# Altium schematic symbol library SCH.SchLib: 154 symbols
Pins are listed as number, name and electrical type; pins without a type are passive.

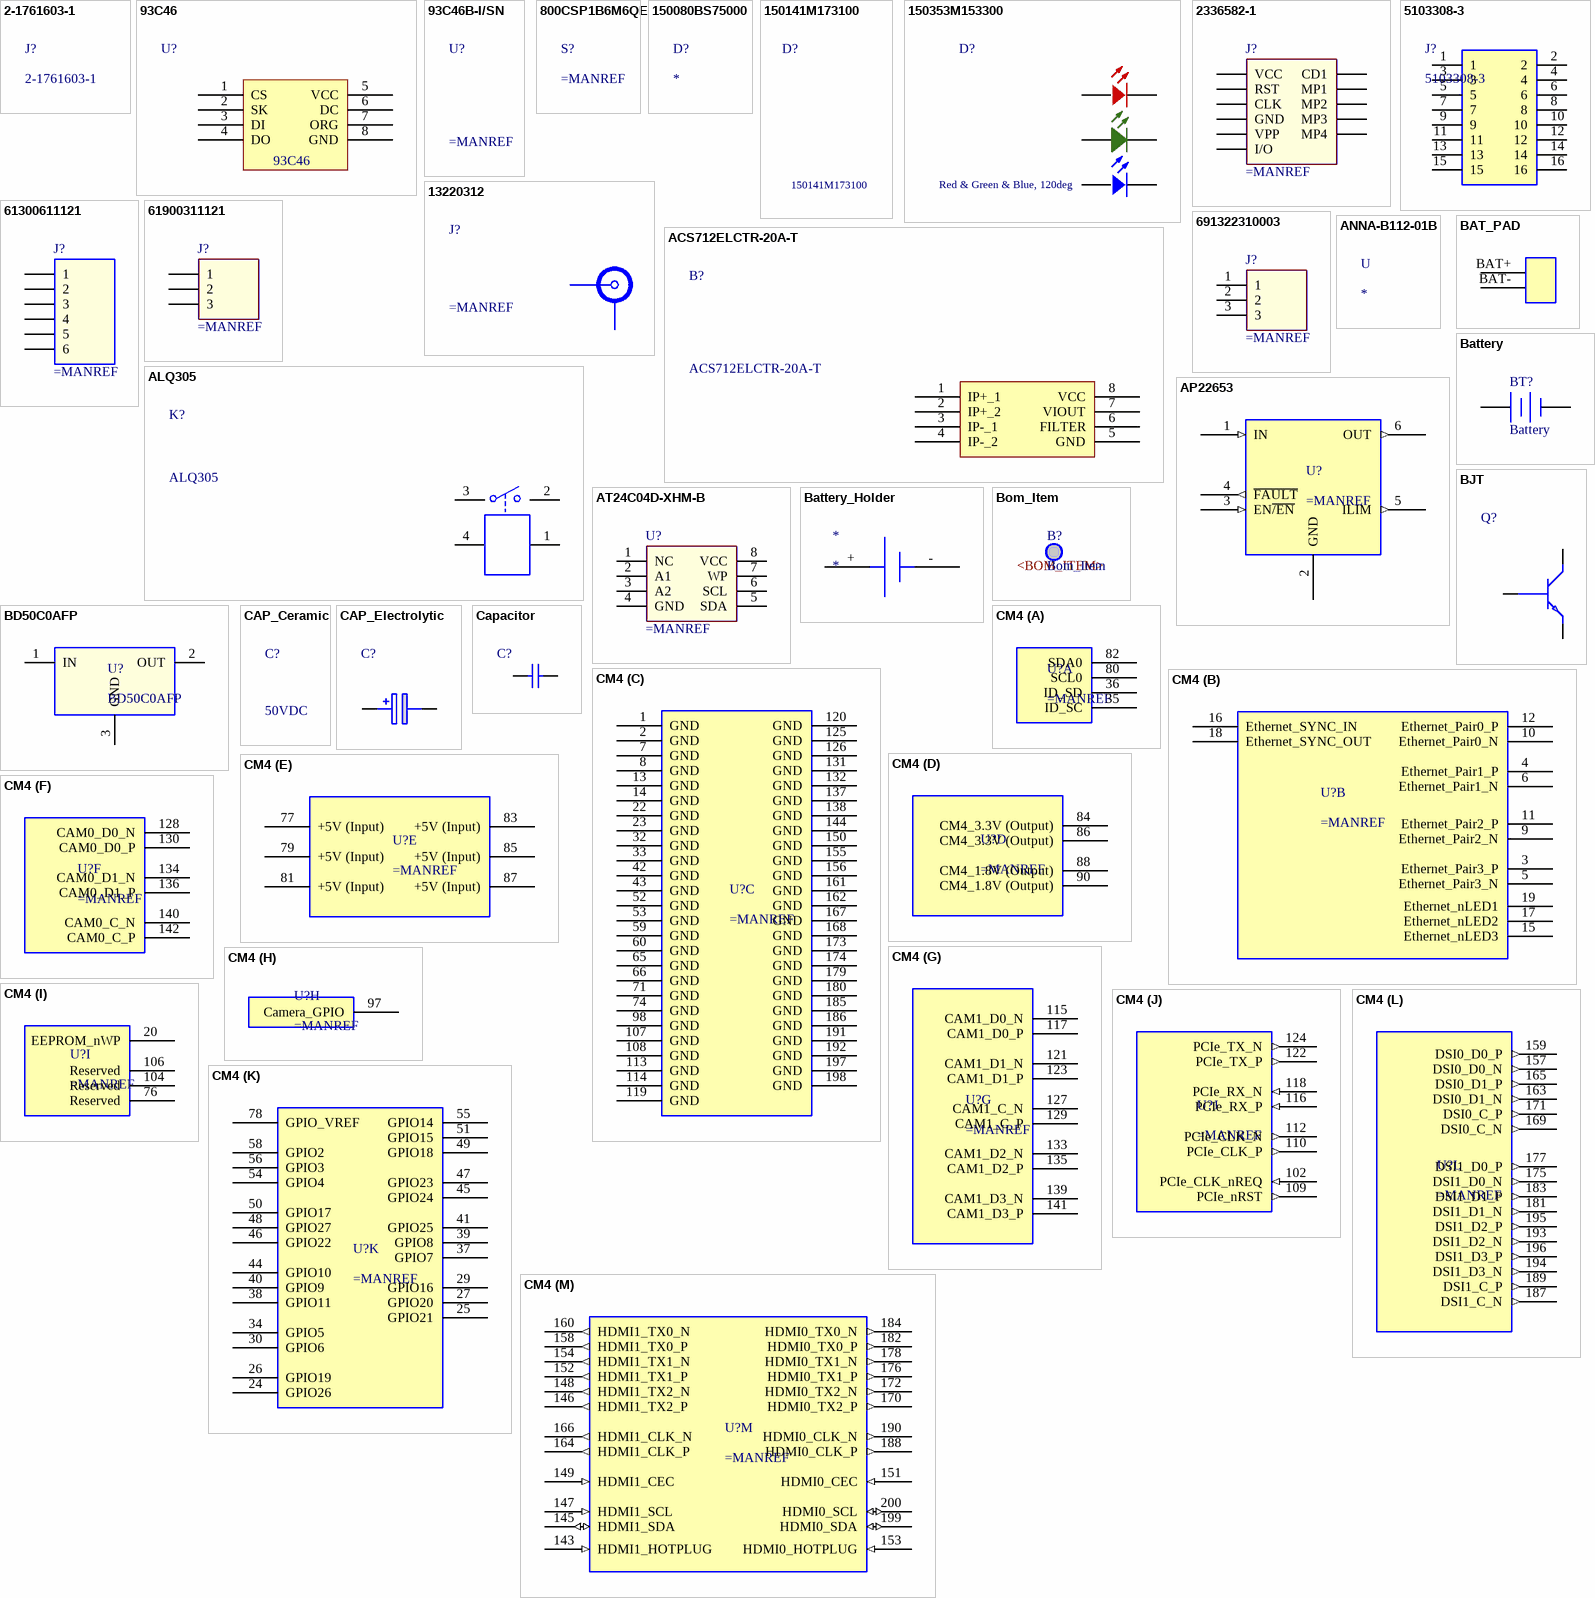
[diagram p0: symbols 2-1761603-1 to CM4]

## 2-1761603-1
designator J?

## 93C46
designator U?
pins: 1 CS, 2 SK, 3 DI, 4 DO, 5 VCC (power), 6 DC, 7 ORG, 8 GND (power)

## 93C46B-I/SN
designator U?

## 800CSP1B6M6QE
designator S?

## 150080BS75000
designator D?

## 150141M173100
designator D?

## 150353M153300
designator D?, comment Red & Green & Blue, 120deg
footprint WL-SFTW_5050_150505M173300
pins: 1 A, 2 K, 3 A, 4 K, 5 A, 6 K

## 2336582-1
designator J?
4FF SIM, Push-Push Type, 7 Position, 7 Loaded Positions, Signal, -40  80 C [-40  185 F], SIM Card Connectors; Manufacturer_Name: TE Connectivity; Manufacturer_Part_Number: 2336582-1; Geometry.Height: 1.62mm; Mouser Part Number: *; Mouser Price/Stock: *; Datasheet Link: https://www.te.com/en/product-2336582-1.html
pins: C1 VCC, C2 RST, C3 CLK, C5 GND, C6 VPP, C7 I/O, CD1, MP1, MP2, MP3, MP4

## 5103308-3
designator J?
pins: 1, 2, 3, 4, 5, 6, 7, 8, 9, 10, 11, 12, 13, 14, 15, 16

## 13220312
designator J?
pins: 1,2,3,4 1, 5

## 61300611121
designator J?
pins: 1, 2, 3, 4, 5, 6

## 61900311121
designator J?
pins: 1, 2, 3

## 691322310003
designator J?
pins: 1, 2, 3

## ACS712ELCTR-20A-T
designator B?
pins: 1 IP+_1, 2 IP+_2, 3 IP-_1, 4 IP-_2, 5 GND, 6 FILTER, 7 VIOUT, 8 VCC

## ALQ305
designator K?
pins: 1 COIL_1, 2 NO, 3 COM, 4 COIL_2

## ANNA-B112-01B
designator U
MF: U-Blox America; MP: ANNA-B112; Price: None; Package: SMD-52 U-Blox America; SnapEDA_Link: https://www.snapeda.com/parts/ANNA-B112/U-Blox%20America%20Inc./view-part/3115089/?ref=snap; Value: *; Availability: Unavailable

## AP22653
designator U?
pins: 1 IN (in), 2 GND (power), 3 EN~{/EN} (in), 4 ~{FAULT} (out), 5 ILIM (out), 6 OUT (out)

## AT24C04D-XHM-B
designator U?
pins: 1 NC, 2 A1, 3 A2, 4 GND, 5 SDA, 6 SCL, 7 WP, 8 VCC

## BAT_PAD
designator J?
pins: BAT+, BAT-

## Battery
designator BT?
Multicell Battery
pins: 1 +, 2 -

## Battery_Holder
designator *
pins: +, -

## BD50C0AFP
designator U?
pins: 1 IN, 2 OUT, 3 GND

## BJT
designator Q?
pins: 1 B, 2 E, 3 C

## Bom_Item
designator B?  (mechanical)
text: <BOM_ITEM>

## CAP_Ceramic
designator C?, comment 50VDC
footprint CAP-0402
footprint CAP-1210
footprint Model Name (Footprint not found)
1 alternate drawing of the same symbol

## CAP_Electrolytic
designator C?
Value: *
pins: 1 +, 2 -

## Capacitor
designator C?
pins: 1, 2

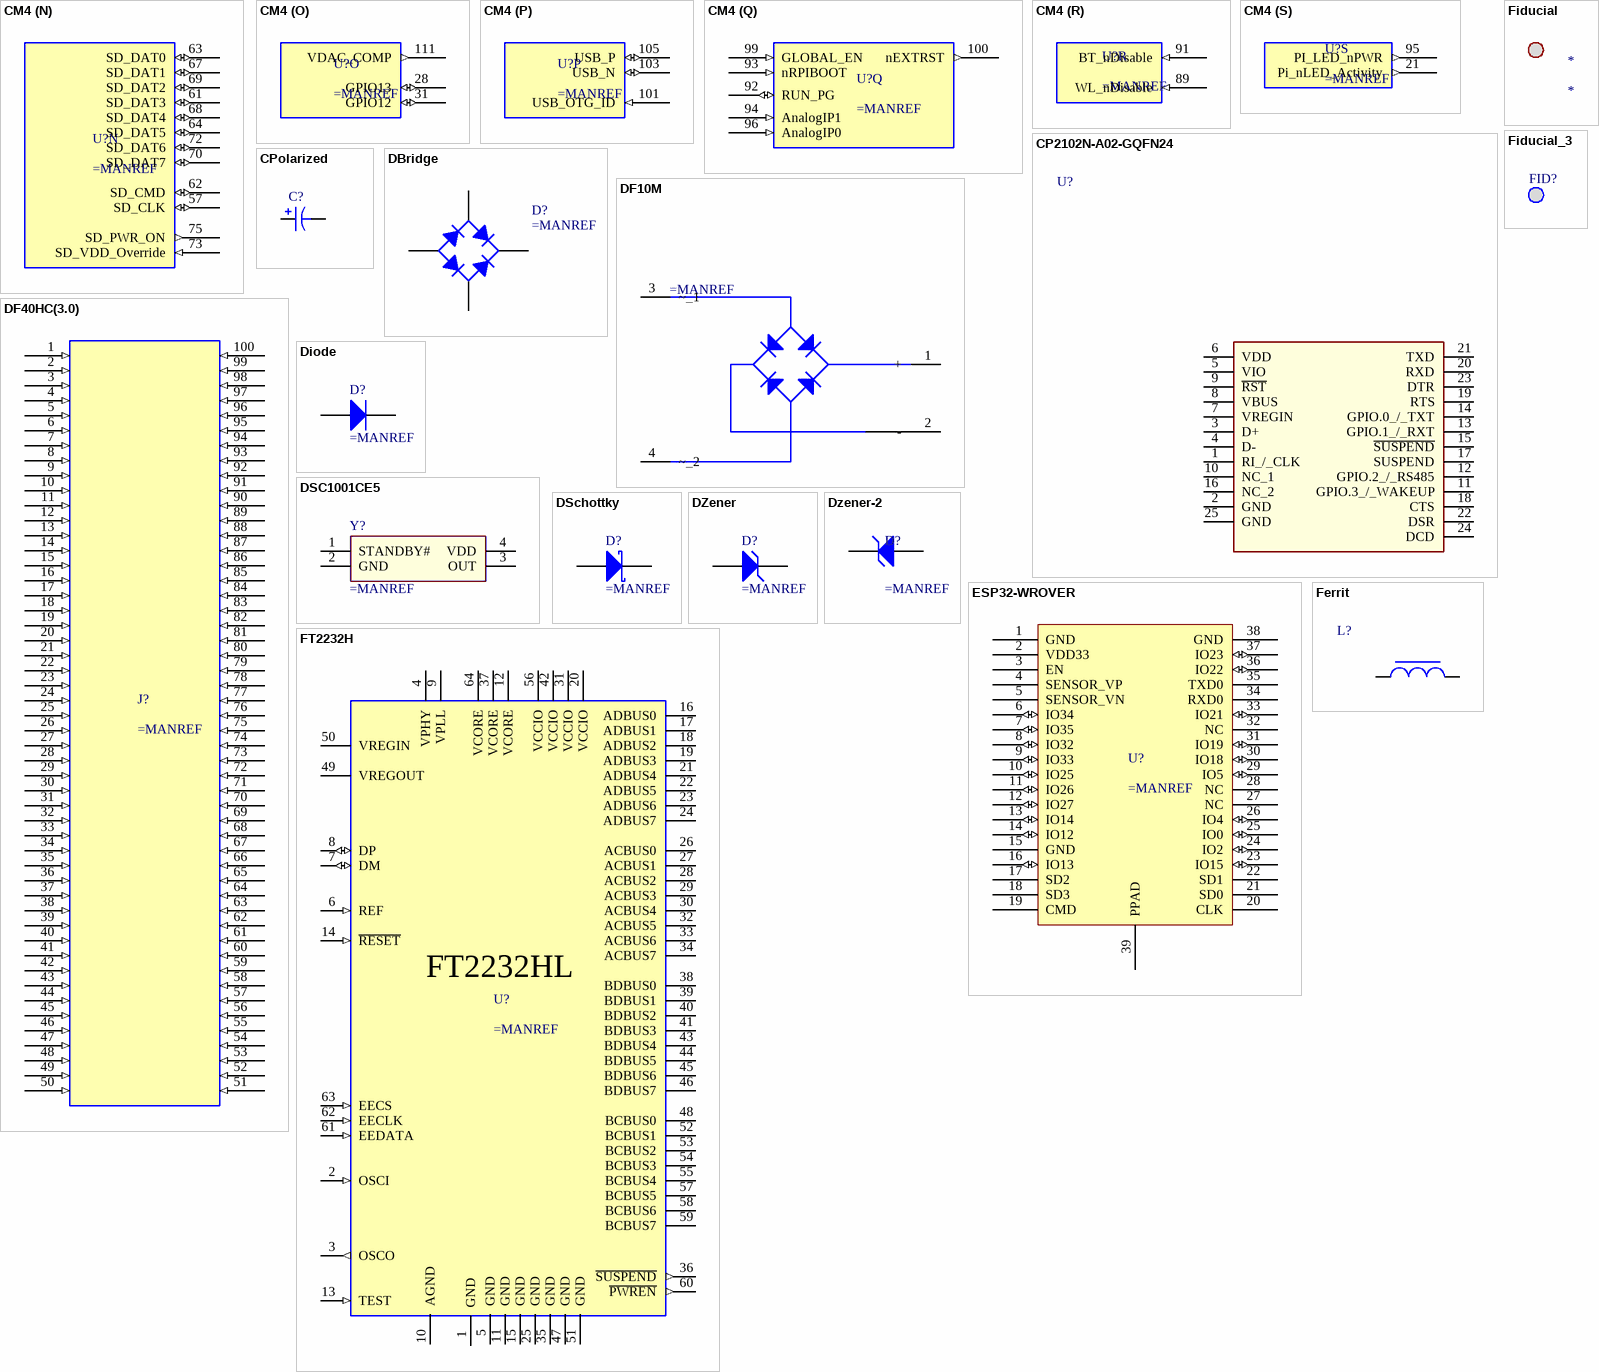
[diagram p1: symbols CM4 to FT2232H]

## CM4
designator U?
part A pins: 35 ID_SC "( BCM2711 GPIO 1) GPIO Typically a 3.3V signal but can be a 1.8V signal by connecting", 36 ID_SD "( BCM2711 GPIO 0) GPIO Typically a 3.3V signal but can be a 1.8V signal by connecting", 80 SCL0 "IIC Clock pin ( BCM2711 GPIO45) Typically used for Camera and Display Internal 1.8K pull", 82 SDA0 "IIC Data pin ( BCM2711 GPIO44 ) Typically used for Camera and Display Internal 1.8K pull"
part B pins: 3 Ethernet_Pair3_P "Ethernet Pair 3 Positive ( connect to Transformer or MagJack)", 4 Ethernet_Pair1_P "Ethernet Pair 1 Positive ( connect to Transformer or MagJack)", 5 Ethernet_Pair3_N "Ethernet Pair 3 Negative ( connect to Transformer or MagJack)", 6 Ethernet_Pair1_N "Ethernet Pair 1 Negative ( connect to Transformer or MagJack)", 9 Ethernet_Pair2_N "Ethernet Pair 2 Negative ( connect to Transformer or MagJack)", 10 Ethernet_Pair0_N "Ethernet Pair 0 Negative ( connect to Transformer or MagJack)", 11 Ethernet_Pair2_P "Ethernet Pair 2 Positive ( connect to Transformer or MagJack)", 12 Ethernet_Pair0_P "Ethernet Pair 0 Positive ( connect to Transformer or MagJack)", 15 Ethernet_nLED3 "Low Active Ethernet Activity indicator ( 3.3V signal) Typically a Green LED is connected to", 16 Ethernet_SYNC_IN "IEEE1588 SYNC Input pin ( 1.8V signal : IOL = 8mA @ VOL< 0.4V )", 17 Ethernet_nLED2 "Low Active Ethernet speed indicator ( 3.3V signal) Typically a Yellow LED is connected to", 18 Ethernet_SYNC_OUT "IEEE1588 SYNC Output pin ( 1.8V signal : IOL = 8mA @ VOL< 0.4V )", 19 Ethernet_nLED1 "Low Active Ethernet speed indicator ( 3.3V signal) Typically a Yellow LED is connected to"
part C pins: 1 GND (power) "Ground (0V)", 2 GND (power) "Ground (0V)", 7 GND (power) "Ground (0V)", 8 GND (power) "Ground (0V)", 13 GND (power) "Ground (0V)", 14 GND (power) "Ground (0V)", 22 GND (power) "Ground (0V)", 23 GND (power) "Ground (0V)", 32 GND (power) "Ground (0V)", 33 GND (power) "Ground (0V)", 42 GND (power) "Ground (0V)", 43 GND (power) "Ground (0V)", 52 GND (power) "Ground (0V)", 53 GND (power) "Ground (0V)", 59 GND (power) "Ground (0V)", 60 GND (power) "Ground (0V)", 65 GND (power) "Ground (0V)", 66 GND (power) "Ground (0V)", 71 GND (power) "Ground (0V)", 74 GND (power) "Ground (0V)", 98 GND (power) "Ground (0V)", 107 GND (power) "Ground (0V)", 108 GND (power) "Ground (0V)", 113 GND (power) "Ground (0V)", 114 GND (power) "Ground (0V)", 119 GND (power) "Ground (0V)", 120 GND (power) "Ground (0V)", 125 GND (power) "Ground (0V)", 126 GND (power) "Ground (0V)", 131 GND (power) "Ground (0V)", 132 GND (power) "Ground (0V)", 137 GND (power) "Ground (0V)", 138 GND (power) "Ground (0V)", 144 GND (power) "Ground (0V)", 150 GND (power) "Ground (0V)", 155 GND (power) "Ground (0V)", 156 GND (power) "Ground (0V)", 161 GND (power) "Ground (0V)", 162 GND (power) "Ground (0V)", 167 GND (power) "Ground (0V)", 168 GND (power) "Ground (0V)", 173 GND (power) "Ground (0V)", 174 GND (power) "Ground (0V)", 179 GND (power) "Ground (0V)", 180 GND (power) "Ground (0V)", 185 GND (power) "Ground (0V)", 186 GND (power) "Ground (0V)", 191 GND (power) "Ground (0V)", 192 GND (power) "Ground (0V)", 197 GND (power) "Ground (0V)", 198 GND (power) "Ground (0V)"
part D pins: 84 CM4_3.3V (Output) (power) "3.3V +/-2.5% Power Output max 300mA per pin for a total of 600mA. This will be powered", 86 CM4_3.3V (Output) (power) "3.3V +/-2.5% Power Output max 300mA per pin for a total of 600mA. This will be powered", 88 CM4_1.8V (Output) (power) "1.8V +/-2.5% Power Output max 300mA per pin for a total of 600mA. This will be powered", 90 CM4_1.8V (Output) (power) "1.8V +/-2.5% Power Output max 300mA per pin for a total of 600mA. This will be powered"
part E pins: 77 +5V (Input) (power) "4.75V-5.25V Main power input", 79 +5V (Input) (power) "4.75V-5.25V Main power input", 81 +5V (Input) (power) "4.75V-5.25V Main power input", 83 +5V (Input) (power) "4.75V-5.25V Main power input", 85 +5V (Input) (power) "4.75V-5.25V Main power input", 87 +5V (Input) (power) "4.75V-5.25V Main power input"
part F pins: 128 CAM0_D0_N "Input Camera0 D0 Negative", 130 CAM0_D0_P "Input Camera0 D0 Positive", 134 CAM0_D1_N "Input Camera0 D1 Negative", 136 CAM0_D1_P "Input Camera0 D1 Positive", 140 CAM0_C_N "Input Camera0 Clock Negative", 142 CAM0_C_P "Input Camera0 Clock Positive"
part G pins: 115 CAM1_D0_N "Input Camera1 D0 Negative", 117 CAM1_D0_P "Input Camera1 D0 Positive", 121 CAM1_D1_N "Input Camera1 D1 Negative", 123 CAM1_D1_P "Input Camera1 D1 Positive", 127 CAM1_C_N "Input Camera1 Clock Negative", 129 CAM1_C_P "Input Camera1 Clock Positive", 133 CAM1_D2_N "Input Camera1 D2 Negative", 135 CAM1_D2_P "Input Camera1 D2 Positive", 139 CAM1_D3_N "Input Camera1 D3 Negative", 141 CAM1_D3_P "Input Camera1 D3 Positive"
part H pins: 97 Camera_GPIO "Typically used to Shutdown the camera to reduce power. Reassigning this pin to another"
part I pins: 20 EEPROM_nWP "Leaving floating NB internally pulled up to CM4_3.3V via 100K ( VIL <0.8V) but can be", 76 Reserved "Do not Connect anything to this pin.", 104 Reserved "Do not Connect anything to this pin", 106 Reserved "Do not Connect anything to this pin."
part J pins: 102 PCIe_CLK_nREQ (in) "Input ( 3.3V signal) PCIe Clock request pin (low to request PCI clock). Internal pulled up", 109 PCIe_nRST (out) "Output (+3.3V signal) PCIe Reset Low active", 110 PCIe_CLK_P (out) "PCIe Clock Out Positive (100MHz) NB AC coupling Capacitor Included on CM4", 112 PCIe_CLK_N (out) "PCIe Clock Out Negative (100MHz) NB AC coupling Capacitor Included on CM4", 116 PCIe_RX_P (in) "Input PCIe GEN 2 RX Positive NB External AC coupling Capacitor required", 118 PCIe_RX_N (in) "Input PCIe GEN 2 RX Negative NB External AC coupling Capacitor required", 122 PCIe_TX_P (out) "Output PCIe GEN 2 TX Positive NB AC coupling Capacitor Included on CM4", 124 PCIe_TX_N (out) "Output PCIe GEN 2 TX Positive NB AC coupling Capacitor Included on CM4"
part K pins: 24 GPIO26 "GPIO Typically a 3.3V signal but can be a 1.8V signal by connecting GPIO_Vref to 1.8V", 25 GPIO21 "GPIO Typically a 3.3V signal but can be a 1.8V signal by connecting GPIO_Vref to 1.8V", 26 GPIO19 "GPIO Typically a 3.3V signal but can be a 1.8V signal by connecting GPIO_Vref to 1.8V", 27 GPIO20 "GPIO Typically a 3.3V signal but can be a 1.8V signal by connecting GPIO_Vref to 1.8V", 29 GPIO16 "GPIO Typically a 3.3V signal but can be a 1.8V signal by connecting GPIO_Vref to 1.8V", 30 GPIO6 "GPIO Typically a 3.3V signal but can be a 1.8V signal by connecting GPIO_Vref to 1.8V", 34 GPIO5 "GPIO Typically a 3.3V signal but can be a 1.8V signal by connecting GPIO_Vref to 1.8V", 37 GPIO7 "GPIO Typically a 3.3V signal but can be a 1.8V signal by connecting GPIO_Vref to 1.8V", 38 GPIO11 "GPIO Typically a 3.3V signal but can be a 1.8V signal by connecting GPIO_Vref to 1.8V", 39 GPIO8 "GPIO Typically a 3.3V signal but can be a 1.8V signal by connecting GPIO_Vref to 1.8V", 40 GPIO9 "GPIO Typically a 3.3V signal but can be a 1.8V signal by connecting GPIO_Vref to 1.8V", 41 GPIO25 "GPIO Typically a 3.3V signal but can be a 1.8V signal by connecting GPIO_Vref to 1.8V", 44 GPIO10 "GPIO Typically a 3.3V signal but can be a 1.8V signal by connecting GPIO_Vref to 1.8V", 45 GPIO24 "GPIO Typically a 3.3V signal but can be a 1.8V signal by connecting GPIO_Vref to 1.8V", 46 GPIO22 "GPIO Typically a 3.3V signal but can be a 1.8V signal by connecting GPIO_Vref to 1.8V", 47 GPIO23 "GPIO Typically a 3.3V signal but can be a 1.8V signal by connecting GPIO_Vref to 1.8V", 48 GPIO27 "GPIO Typically a 3.3V signal but can be a 1.8V signal by connecting GPIO_Vref to 1.8V", 49 GPIO18 "GPIO Typically a 3.3V signal but can be a 1.8V signal by connecting GPIO_Vref to 1.8V", 50 GPIO17 "GPIO Typically a 3.3V signal but can be a 1.8V signal by connecting GPIO_Vref to 1.8V", 51 GPIO15 "GPIO Typically a 3.3V signal but can be a 1.8V signal by connecting GPIO_Vref to 1.8V", 54 GPIO4 "GPIO Typically a 3.3V signal but can be a 1.8V signal by connecting GPIO_Vref to 1.8V", 55 GPIO14 "GPIO Typically a 3.3V signal but can be a 1.8V signal by connecting GPIO_Vref to 1.8V", 56 GPIO3 "GPIO Typically a 3.3V signal but can be a 1.8V signal by connecting GPIO_Vref to 1.8V.", 58 GPIO2 "GPIO Typically a 3.3V signal but can be a 1.8V signal by connecting GPIO_Vref to 1.8V.", 78 GPIO_VREF "Must be connected to CM4_3.3V ( pins 84 and 86 ) for 3.3V GPIO or CM4_1.8V ( pins 88 and"
part L pins: 157 DSI0_D0_N (out) "Output Display0 D0 Negative", 159 DSI0_D0_P (out) "Output Display0 D0 Positive", 163 DSI0_D1_N (out) "Output Display0 D1 Negative", 165 DSI0_D1_P (out) "Output Display0 D1 Positive", 169 DSI0_C_N (out) "Output Display0 Clock Negative", 171 DSI0_C_P (out) "Output Display0 Clock Positive", 175 DSI1_D0_N (out) "Output Display1 D0 Negative", 177 DSI1_D0_P (out) "Output Display1 D0 Positive", 181 DSI1_D1_N (out) "Output Display1 D1 Negative", 183 DSI1_D1_P (out) "Output Display1 D1 Positive", 187 DSI1_C_N (out) "Output Display1 Clock Negative", 189 DSI1_C_P (out) "Output Display1 Clock Positive", 193 DSI1_D2_N (out) "Output Display1 D2 Negative", 194 DSI1_D3_N (out) "Output Display1 D3 Negative", 195 DSI1_D2_P (out) "Output Display1 D2 Positive", 196 DSI1_D3_P (out) "Output Display1 D3 Positive"
part M pins: 143 HDMI1_HOTPLUG (in) "Input HDMI1 Hotplug Internally pulled down with a 100K. 5V tolerant. (It can be connected", 145 HDMI1_SDA (io) "Bidir HDMI1 SDA Internally pulled up with a 1.8K. 5V tolerant. (It can be connected directly", 146 HDMI1_TX2_P (out) "Output HDMI1 TX2 Positive", 147 HDMI1_SCL (in) "Input HDMI1 SCL Internally pulled up with a 1.8K. 5V tolerant. (It can be connected directly", 148 HDMI1_TX2_N (out) "Output HDMI1 TX2 Negative", 149 HDMI1_CEC (in) "Input HDMI1 CEC Internally pulled up with a 27K. 5V tolerant. (It can be connected directly", 151 HDMI0_CEC (in) "Input HDMI0 CEC Internally pulled up with a 27K. 5V tolerant (It can be connected directly", 152 HDMI1_TX1_P (out) "Output HDMI1 TX1 Positive", 153 HDMI0_HOTPLUG (in) "Input HDMI0 Hotplug Internally pulled down 100K. 5V tolerant. (It can be connected directly", 154 HDMI1_TX1_N (out) "Output HDMI1 TX1 Negative", 158 HDMI1_TX0_P (out) "Output HDMI1 TX0 Positive", 160 HDMI1_TX0_N (out) "Output HDMI1 TX0 Negative", 164 HDMI1_CLK_P (out) "Output HDMI1 Clock Positive", 166 HDMI1_CLK_N (out) "Output HDMI1 Clock Negative", 170 HDMI0_TX2_P (out) "Output HDMI0 TX2 Positive", 172 HDMI0_TX2_N (out) "Output HDMI0 TX2 Negative", 176 HDMI0_TX1_P (out) "Output HDMI0 TX1 Positive", 178 HDMI0_TX1_N (out) "Output HDMI0 TX1 Negative", 182 HDMI0_TX0_P (out) "Output HDMI0 TX0 Positive", 184 HDMI0_TX0_N (out) "Output HDMI0 TX0 Negative", 188 HDMI0_CLK_P (out) "Output HDMI0 Clock Positive", 190 HDMI0_CLK_N (out) "Output HDMI0 Clock Negative", 199 HDMI0_SDA (io) "Bidir HDMI0 SDA Internally pulled up with a 1.8K. 5V tolerant. (It can be connected directly", 200 HDMI0_SCL (io) "Bidir HDMI0 SCL Internally pulled up with a 1.8K. 5V tolerant. (It can be connected directly"
part N pins: 57 SD_CLK (io) "SDCARD Clock signal (only available on CM4Lite)", 61 SD_DAT3 (io) "SDCARD/eMMC Data3 signal (only available on CM4Lite)", 62 SD_CMD (io) "SDCARD/eMMC Command signal (only available on CM4Lite)", 63 SD_DAT0 (io) "SDCARD/eMMC Data0 signal (only available on CM4Lite)", 64 SD_DAT5 (io) "SDCARD/eMMC Data5 signal (only available on CM4Lite)", 67 SD_DAT1 (io) "SDCARD/eMMC Data1 signal (only available on CM4Lite)", 68 SD_DAT4 (io) "SDCARD/eMMC Data4 signal (only available on CM4Lite)", 69 SD_DAT2 (io) "SDCARD/eMMC Data2 signal (only available on CM4Lite)", 70 SD_DAT7 (io) "SDCARD/eMMC Data7 signal (only available on CM4Lite)", 72 SD_DAT6 (io) "SDCARD/eMMC Data6 signal (only available on CM4Lite)", 73 SD_VDD_Override (in) "Force SDCARD/eMMC interface to 1.8V signalling if set to 3.3V, otherwise leave", 75 SD_PWR_ON (out) "Output to Power switch for the SDCARD. The CM4 sets this pin High (3.3V) to signal that"
part O pins: 28 GPIO13 (io) "GPIO Typically a 3.3V signal but can be a 1.8V signal by connecting GPIO_Vref to 1.8V", 31 GPIO12 (io) "GPIO Typically a 3.3V signal but can be a 1.8V signal by connecting GPIO_Vref to 1.8V", 111 VDAC_COMP (out) "Video DAC output (TV OUT)"
part P pins: 101 USB_OTG_ID (in) "Input ( 3.3V signal ) USB OTG Pin. Internal pulled up. When grounded the CM4 becomes a", 103 USB_N (io) "USB D", 105 USB_P (io) "USB D+"
part Q pins: 92 RUN_PG (io) "Bidirectional pin. Can be driven low ( via a 220R resistor) to Reset the CM4 CPU. As an", 93 nRPIBOOT (in) "A low on this pin forces booting from an RPI server ( e.g. PC or a Raspberry Pi)  if not used", 94 AnalogIP1 (in) "Analogue input of the MXL7704. Typically connected to CC pin of Type C power connector", 96 AnalogIP0 (in) "Analogue input of the MXL7704. Typically connected to CC pin of Type C power connector", 99 GLOBAL_EN (in) "Input. Drive low to power off CM4. Internally pulled up with a 100K to +5V", 100 nEXTRST (out) "Output Driven low during reset Driven high (CM4_3.3V) once CM4 CPU has started to boot"
part R pins: 89 WL_nDisable (in) "Can be left floating if driven low the wireless interface will be disabled. Internal pulled up via", 91 BT_nDisable (in) "Can be left floating if driven low the Bluetooth interface will be disabled. Internal pulled up"
part S pins: 21 Pi_nLED_Activity (out) "Low Active Pi Activity LED. 20mA Max 5V tolerant ( VOL<0.4V). ( this is the signal that drives", 95 PI_LED_nPWR (out) "Low active Output to drive Power On LED. This signal needs to be buffered"

## CP2102N-A02-GQFN24
designator U?
pins: 1 RI_/_CLK, 2 GND, 3 D+, 4 D-, 5 VIO, 6 VDD, 7 VREGIN, 8 VBUS, 9 ~{RST}, 10 NC_1, 11 GPIO.3_/_WAKEUP, 12 GPIO.2_/_RS485, 13 GPIO.1_/_RXT, 14 GPIO.0_/_TXT, 15 ~{SUSPEND}, 16 NC_2, 17 SUSPEND, 18 CTS, 19 RTS, 20 RXD, 21 TXD, 22 DSR, 23 DTR, 24 DCD, 25 GND

## CPolarized
designator C?, comment Polarized Capacitor  (value not drawn)
pins: 1, 2
1 alternate drawing of the same symbol

## DBridge
designator D?
pins: 1 K, 2 C, 3 A, 4 C

## DF10M
designator ?
pins: 1 +, 2 -, 3 ~_1, 4 ~_2

## DF40HC(3.0)
designator J?
pins: 1 (in), 2 (in), 3 (in), 4 (in), 5 (in), 6 (in), 7 (in), 8 (in), 9 (in), 10 (in), 11 (in), 12 (in), 13 (in), 14 (in), 15 (in), 16 (in), 17 (in), 18 (in), 19 (in), 20 (in), 21 (in), 22 (in), 23 (in), 24 (in), 25 (in), 26 (in), 27 (in), 28 (in), 29 (in), 30 (in), 31 (in), 32 (in), 33 (in), 34 (in), 35 (in), 36 (in), 37 (in), 38 (in), 39 (in), 40 (in), 41 (in), 42 (in), 43 (in), 44 (in), 45 (in), 46 (in), 47 (in), 48 (in), 49 (in), 50 (in), 51 (in), 52 (in), 53 (in), 54 (in), 55 (in), 56 (in), 57 (in), 58 (in), 59 (in), 60 (in), 61 (in), 62 (in), 63 (in), 64 (in), 65 (in), 66 (in), 67 (in), 68 (in), 69 (in), 70 (in), 71 (in), 72 (in), 73 (in), 74 (in), 75 (in), 76 (in), 77 (in), 78 (in), 79 (in), 80 (in), 81 (in), 82 (in), 83 (in), 84 (in), 85 (in), 86 (in), 87 (in), 88 (in), 89 (in), 90 (in), 91 (in), 92 (in), 93 (in), 94 (in), 95 (in), 96 (in), 97 (in), 98 (in), 99 (in), 100 (in)

## Diode
designator D?
pins: 1 A, 2 K

## DSC1001CE5
designator Y?
footprint DSC6183CI2A032K768
pins: 1 STANDBY#, 2 GND, 3 OUT, 4 VDD

## DSchottky
designator D?
pins: 1 A, 2 K

## DZener
designator D?
pins: 1 A, 2 K

## Dzener-2
designator D?
pins: 1 A, 3 K

## ESP32-WROVER
designator U?
pins: 1 GND (power), 2 VDD33 (power), 3 EN, 4 SENSOR_VP, 5 SENSOR_VN, 6 IO34 (io), 7 IO35 (io), 8 IO32 (io), 9 IO33 (io), 10 IO25 (io), 11 IO26 (io), 12 IO27 (io), 13 IO14 (io), 14 IO12 (io), 15 GND, 16 IO13 (io), 17 SD2, 18 SD3, 19 CMD, 20 CLK, 21 SD0, 22 SD1, 23 IO15 (io), 24 IO2 (io), 25 IO0 (io), 26 IO4 (io), 27 NC, 28 NC, 29 IO5 (io), 30 IO18 (io), 31 IO19 (io), 32 NC, 33 IO21 (io), 34 RXD0, 35 TXD0, 36 IO22 (io), 37 IO23 (io), 38 GND (power), 39 PPAD

## Ferrit
designator L?
pins: 1, 2

## Fiducial
designator *

## Fiducial_3
designator FID?

## FT2232H
designator U?
pins: 1 GND (power), 2 OSCI (in), 3 OSCO (out), 4 VPHY (power), 5 GND (power), 6 REF (in), 7 DM (io), 8 DP (io), 9 VPLL (power), 10 AGND (power), 11 GND (power), 12 VCORE (power), 13 TEST (in), 14 ~{RESET} (in), 15 GND (power), 16 ADBUS0, 17 ADBUS1, 18 ADBUS2, 19 ADBUS3, 20 VCCIO (power), 21 ADBUS4, 22 ADBUS5, 23 ADBUS6, 24 ADBUS7, 25 GND (power), 26 ACBUS0, 27 ACBUS1, 28 ACBUS2, 29 ACBUS3, 30 ACBUS4, 31 VCCIO (power), 32 ACBUS5, 33 ACBUS6, 34 ACBUS7, 35 GND (power), 36 ~{SUSPEND} (out), 37 VCORE (power), 38 BDBUS0, 39 BDBUS1, 40 BDBUS2, 41 BDBUS3, 42 VCCIO (power), 43 BDBUS4, 44 BDBUS5, 45 BDBUS6, 46 BDBUS7, 47 GND (power), 48 BCBUS0, 49 VREGOUT (power), 50 VREGIN (power), 51 GND (power), 52 BCBUS1, 53 BCBUS2, 54 BCBUS3, 55 BCBUS4, 56 VCCIO (power), 57 BCBUS5, 58 BCBUS6, 59 BCBUS7, 60 ~{PWREN} (out), 61 EEDATA (in), 62 EECLK (in), 63 EECS (in), 64 VCORE (power)
text: FT2232HL

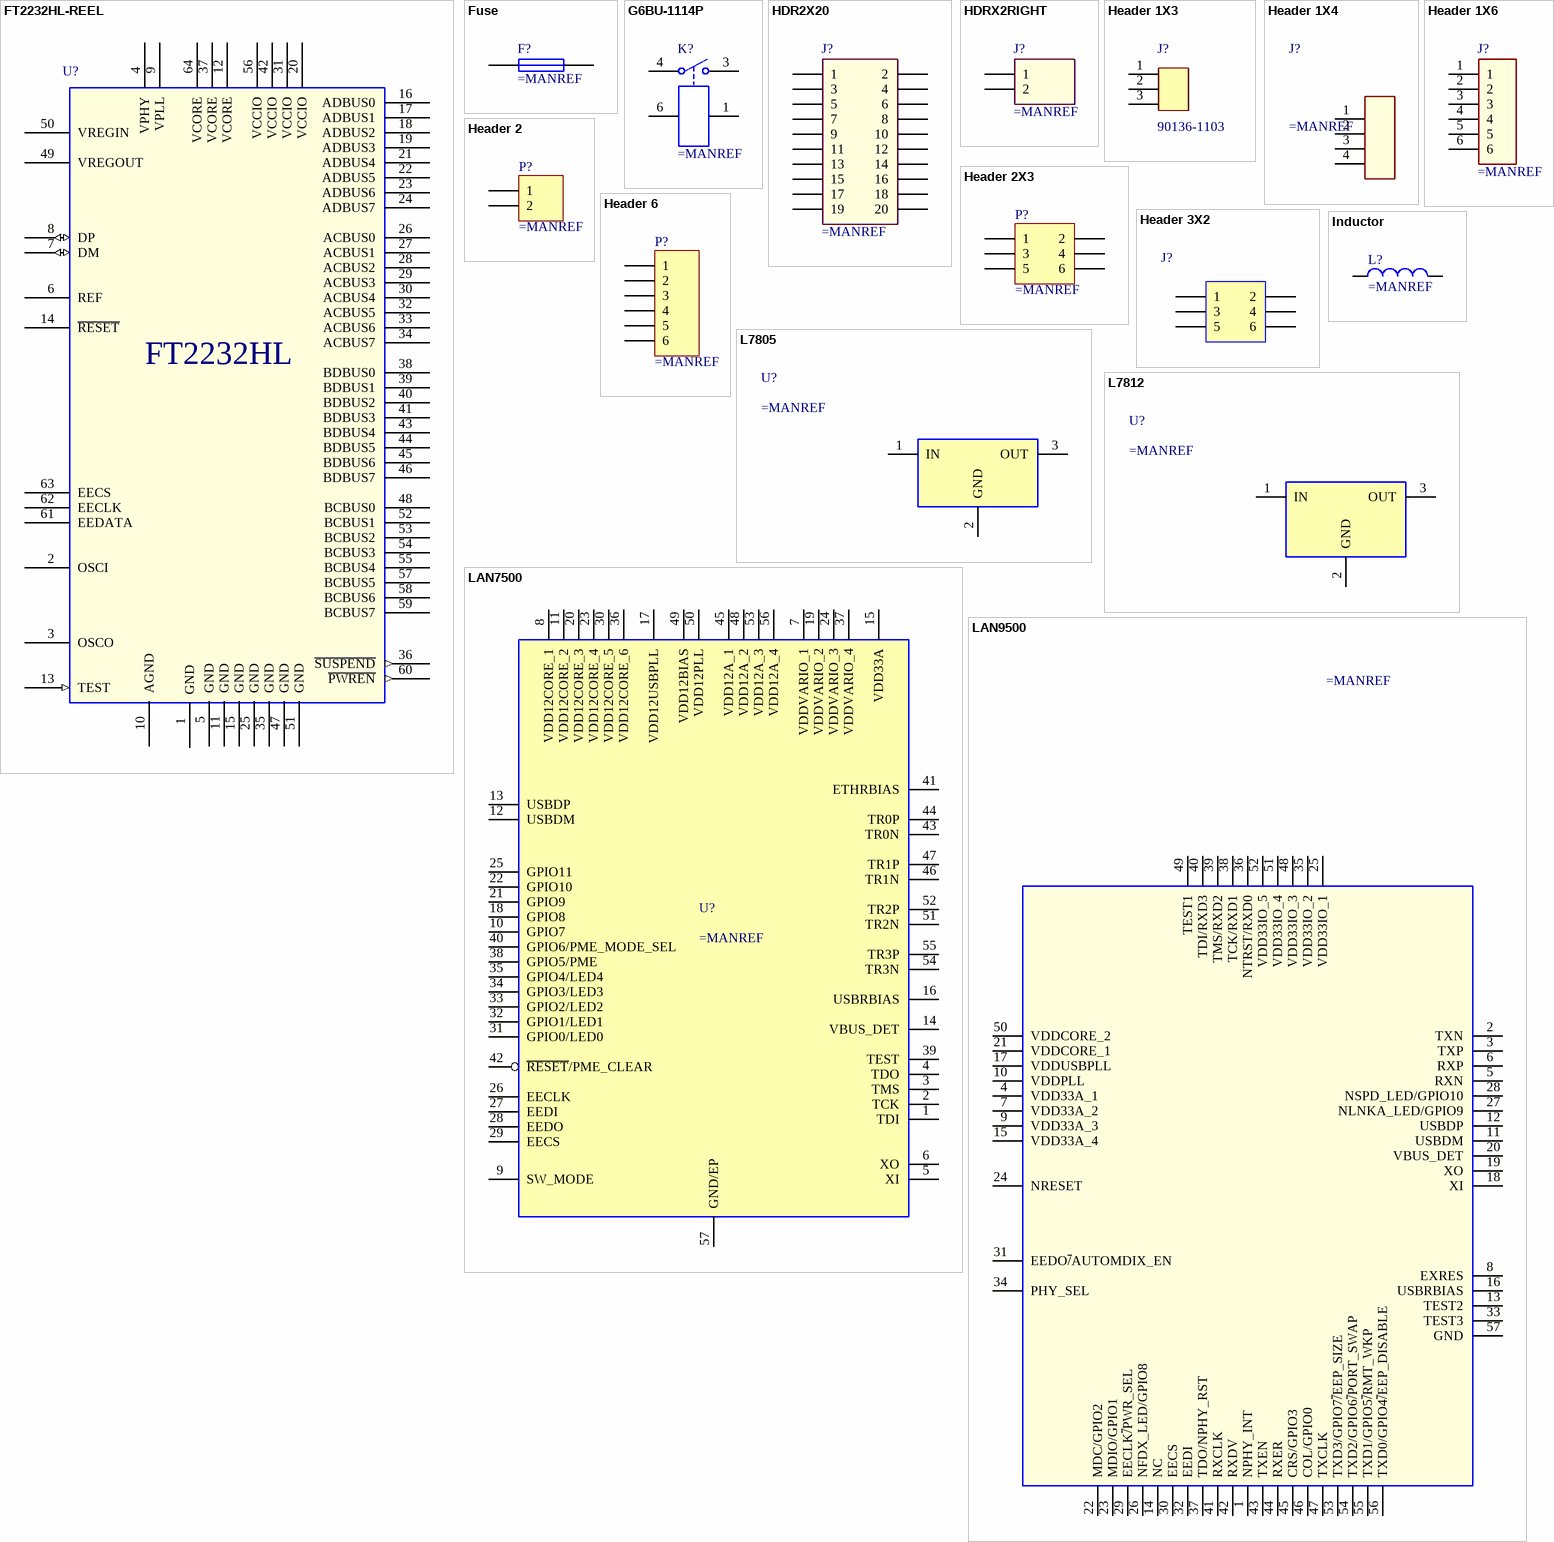
[diagram p2: symbols FT2232HL-REEL to LAN9500]

## FT2232HL-REEL
designator U?
pins: 1 GND (power), 2 OSCI, 3 OSCO, 4 VPHY (power), 5 GND (power), 6 REF, 7 DM (io), 8 DP (io), 9 VPLL (power), 10 AGND (power), 11 GND (power), 12 VCORE (power), 13 TEST (in), 14 ~{RESET}, 15 GND (power), 16 ADBUS0, 17 ADBUS1, 18 ADBUS2, 19 ADBUS3, 20 VCCIO (power), 21 ADBUS4, 22 ADBUS5, 23 ADBUS6, 24 ADBUS7, 25 GND (power), 26 ACBUS0, 27 ACBUS1, 28 ACBUS2, 29 ACBUS3, 30 ACBUS4, 31 VCCIO (power), 32 ACBUS5, 33 ACBUS6, 34 ACBUS7, 35 GND (power), 36 ~{SUSPEND} (out), 37 VCORE (power), 38 BDBUS0, 39 BDBUS1, 40 BDBUS2, 41 BDBUS3, 42 VCCIO (power), 43 BDBUS4, 44 BDBUS5, 45 BDBUS6, 46 BDBUS7, 47 GND (power), 48 BCBUS0, 49 VREGOUT (power), 50 VREGIN (power), 51 GND (power), 52 BCBUS1, 53 BCBUS2, 54 BCBUS3, 55 BCBUS4, 56 VCCIO (power), 57 BCBUS5, 58 BCBUS6, 59 BCBUS7, 60 ~{PWREN} (out), 61 EEDATA, 62 EECLK, 63 EECS, 64 VCORE (power)
text: FT2232HL

## Fuse
designator F?
pins: 1, 2

## G6BU-1114P
designator K?
pins: 1, 3, 4, 6

## HDR2X20
designator J?
pins: 1, 2, 3, 4, 5, 6, 7, 8, 9, 10, 11, 12, 13, 14, 15, 16, 17, 18, 19, 20

## HDRX2RIGHT
designator J?
pins: 1, 2

## Header 1X3
designator J?, comment 90136-1103
pins: 1, 2, 3

## Header 1X4
designator J?
pins: 1, 2, 3, 4

## Header 1X6
designator J?
pins: 1, 2, 3, 4, 5, 6

## Header 2
designator P?
pins: 1, 2

## Header 2X3
designator P?
pins: 1, 2, 3, 4, 5, 6

## Header 3X2
designator J?
pins: 1, 2, 3, 4, 5, 6

## Header 6
designator P?
Header, 6-Pin
pins: 1, 2, 3, 4, 5, 6

## Inductor
designator L?
pins: 1, 2

## L7805
designator U?
pins: 1 IN, 2 GND, 3 OUT

## L7812
designator U?
pins: 1 IN, 2 GND, 3 OUT

## LAN7500
designator U?
pins: 1 TDI, 2 TCK, 3 TMS, 4 TDO, 5 XI, 6 XO, 7 VDDVARIO_1, 8 VDD12CORE_1, 9 SW_MODE, 10 GPIO7, 11 VDD12CORE_2, 12 USBDM, 13 USBDP, 14 VBUS_DET, 15 VDD33A, 16 USBRBIAS, 17 VDD12USBPLL, 18 GPIO8, 19 VDDVARIO_2, 20 VDD12CORE_3, 21 GPIO9, 22 GPIO10, 23 VDD12CORE_4, 24 VDDVARIO_3, 25 GPIO11, 26 EECLK, 27 EEDI, 28 EEDO, 29 EECS, 30 VDD12CORE_5, 31 GPIO0/LED0, 32 GPIO1/LED1, 33 GPIO2/LED2, 34 GPIO3/LED3, 35 GPIO4/LED4, 36 VDD12CORE_6, 37 VDDVARIO_4, 38 GPIO5/PME, 39 TEST, 40 GPIO6/PME_MODE_SEL, 41 ETHRBIAS, 42 ~{RESET}/PME_CLEAR, 43 TR0N, 44 TR0P, 45 VDD12A_1, 46 TR1N, 47 TR1P, 48 VDD12A_2, 49 VDD12BIAS, 50 VDD12PLL, 51 TR2N, 52 TR2P, 53 VDD12A_3, 54 TR3N, 55 TR3P, 56 VDD12A_4, 57 GND/EP

## LAN9500
designator ?
pins: 1 NPHY_INT, 2 TXN, 3 TXP, 4 VDD33A_1, 5 RXN, 6 RXP, 7 VDD33A_2, 8 EXRES, 9 VDD33A_3, 10 VDDPLL, 11 USBDM, 12 USBDP, 13 TEST2, 14 NC, 15 VDD33A_4, 16 USBRBIAS, 17 VDDUSBPLL, 18 XI, 19 XO, 20 VBUS_DET, 21 VDDCORE_1, 22 MDC/GPIO2, 23 MDIO/GPIO1, 24 NRESET, 25 VDD33IO_1, 26 NFDX_LED/GPIO8, 27 NLNKA_LED/GPIO9, 28 NSPD_LED/GPIO10, 29 EECLK~{/}PWR_SEL, 30 EECS, 31 EEDO~{/}AUTOMDIX_EN, 32 EEDI, 33 TEST3, 34 PHY_SEL, 35 VDD33IO_2, 36 NTRST/RXD0, 37 TDO/NPHY_RST, 38 TCK/RXD1, 39 TMS/RXD2, 40 TDI/RXD3, 41 RXCLK, 42 RXDV, 43 TXEN, 44 RXER, 45 CRS/GPIO3, 46 COL/GPIO0, 47 TXCLK, 48 VDD33IO_3, 49 TEST1, 50 VDDCORE_2, 51 VDD33IO_4, 52 VDD33IO_5, 53 TXD3/GPIO7~{/}EEP_SIZE, 54 TXD2/GPIO6~{/}PORT_SWAP, 55 TXD1/GPIO5~{/}RMT_WKP, 56 TXD0/GPIO4~{/}EEP_DISABLE, 57 GND

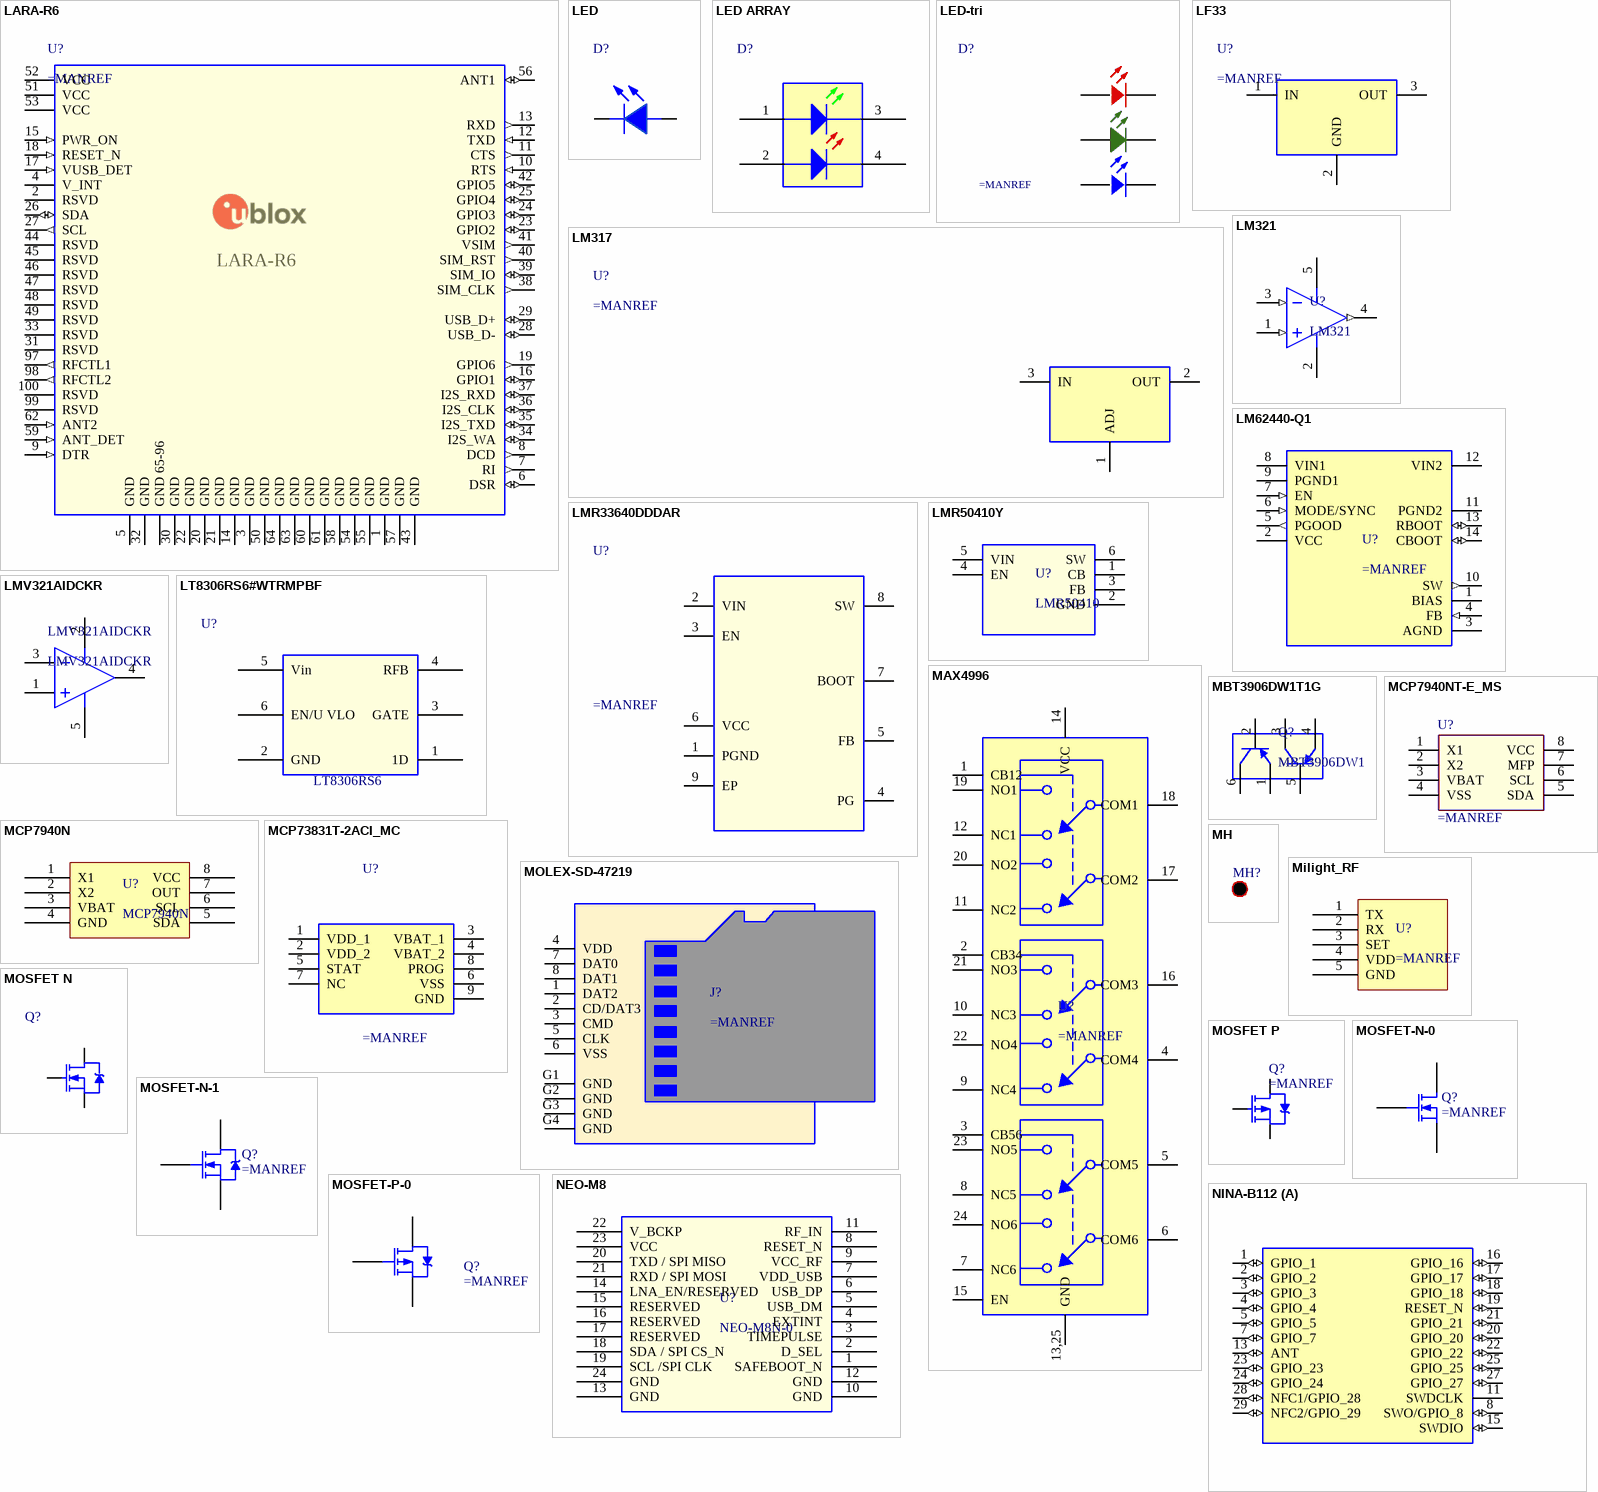
[diagram p3: symbols LARA-R6 to NINA-B112]

## LARA-R6
designator U?
pins: 1 GND (power), 2 RSVD, 3 GND (power), 4 V_INT (power), 5 GND (power), 6 DSR (io), 7 RI (out), 8 DCD (out), 9 DTR (in), 10 RTS (in), 11 CTS (out), 12 TXD (in), 13 RXD (out), 14 GND (power), 15 PWR_ON (in), 16 GPIO1 (io), 17 VUSB_DET (in), 18 RESET_N (in), 19 GPIO6 (out), 20 GND (power), 21 GND (power), 22 GND (power), 23 GPIO2 (io), 24 GPIO3 (io), 25 GPIO4 (io), 26 SDA (io), 27 SCL (out), 28 USB_D- (io), 29 USB_D+ (io), 30 GND (power), 31 RSVD, 32 GND (power), 33 RSVD, 34 I2S_WA (io), 35 I2S_TXD (io), 36 I2S_CLK (io), 37 I2S_RXD (io), 38 SIM_CLK (out), 39 SIM_IO (io), 40 SIM_RST (out), 41 VSIM (out), 42 GPIO5 (io), 43 GND (power), 44 RSVD, 45 RSVD, 46 RSVD, 47 RSVD, 48 RSVD, 49 RSVD, 50 GND (power), 51 VCC (power), 52 VCC (power), 53 VCC (power), 54 GND (power), 55 GND (power), 56 ANT1 (io), 57 GND (power), 58 GND (power), 59 ANT_DET (in), 60 GND (power), 61 GND (power), 62 ANT2 (in), 63 GND (power), 64 GND (power), 65 GND 65-96 (power), 97 RFCTL1 (out), 98 RFCTL2 (out), 99 RSVD, 100 RSVD

## LED
designator D?
pins: 1 K, 2 A

## LED ARRAY
designator D?
pins: 1, 2, 3, 4

## LED-tri
designator D?
pins: 1 A, 2 K, 3 A, 4 K, 5 A, 6 K

## LF33
designator U?
pins: 1 IN, 2 GND, 3 OUT

## LM317
designator U?
pins: 1 ADJ, 2 OUT, 3 IN

## LM321
designator U?
pins: 1 +IN A (in), 2 -V (power), 3 -IN A (in), 4 OUT A (out), 5 +V (power)

## LM62440-Q1
designator U?
pins: 1 BIAS (power), 2 VCC (power), 3 AGND (power), 4 FB (in), 5 PGOOD  (out), 6 MODE/SYNC (in), 7 EN (in), 8 VIN1 (power), 9 PGND1 (power), 10 SW (out), 11 PGND2 (power), 12 VIN2 (power), 13 RBOOT (io), 14 CBOOT (io)

## LMR33640DDDAR
designator U?
pins: 1 PGND, 2 VIN, 3 EN, 4 PG, 5 FB, 6 VCC, 7 BOOT, 8 SW, 9 EP

## LMR50410Y
designator U?, comment LMR50410
pins: 1 CB, 2 GND, 3 FB, 4 EN, 5 VIN, 6 SW

## LMV321AIDCKR
designator LMV321AIDCKR
pins: 1 +IN, 2 -V (power), 3 -IN, 4 OUT, 5 +V (power)

## LT8306RS6#WTRMPBF
designator U?
pins: 1 1D, 2 GND, 3 GATE, 4 RFB, 5 Vin, 6 EN/U VLO
text: LT8306RS6

## MAX4996
designator U?
pins: 1 CB12, 2 CB34, 3 CB56, 4 COM4, 5 COM5, 6 COM6, 7 NC6, 8 NC5, 9 NC4, 10 NC3, 11 NC2, 12 NC1, 13,25 GND, 14 VCC, 15 EN, 16 COM3, 17 COM2, 18 COM1, 19 NO1, 20 NO2, 21 NO3, 22 NO4, 23 NO5, 24 NO6

## MBT3906DW1T1G
designator Q?, comment MBT3906DW1
pins: 1 E2, 2 B2, 3 C1, 4 E1, 5 B1, 6 C2

## MCP7940N
designator U?
pins: 1 X1, 2 X2, 3 VBAT, 4 GND, 5 SDA, 6 SCL, 7 OUT, 8 VCC

## MCP7940NT-E_MS
designator U?
Real Time Clock I2C GP RTCC 64B SRAM, EXT
pins: 1 X1, 2 X2, 3 VBAT, 4 VSS, 5 SDA, 6 SCL, 7 MFP, 8 VCC

## MCP73831T-2ACI_MC
designator U?
pins: 1 VDD_1, 2 VDD_2, 3 VBAT_1, 4 VBAT_2, 5 STAT, 6 VSS, 7 NC, 8 PROG, 9 GND

## MH
designator MH?  (no BOM)
pins: MH

## Milight_RF
designator U?
pins: 1 TX, 2 RX, 3 SET, 4 VDD, 5 GND

## MOLEX-SD-47219
designator J?
pins: 1 DAT2, 2 CD/DAT3, 3 CMD, 4 VDD, 5 CLK, 6 VSS, 7 DAT0, 8 DAT1, G1 GND, G2 GND, G3 GND, G4 GND

## MOSFET N
designator Q?
pins: 1,2,3,10 S, 4 G, 5,6,7,8,9 D

## MOSFET P
designator Q?
pins: 1 G, 2 D, 3 S

## MOSFET-N-0
designator Q?
pins: 1 G, 2 S, 3 D

## MOSFET-N-1
designator Q?
pins: 1 G, 3 S, 4 D

## MOSFET-P-0
designator Q?
pins: 1,2,3 S, 4 G, 5,6,7,8,9 D

## NEO-M8
designator U?, comment NEO-M8N-0
pins: 1 SAFEBOOT_N, 2 D_SEL, 3 TIMEPULSE, 4 EXTINT, 5 USB_DM, 6 USB_DP, 7 VDD_USB, 8 RESET_N, 9 VCC_RF, 10 GND, 11 RF_IN, 12 GND, 13 GND, 14 LNA_EN/RESERVED, 15 RESERVED, 16 RESERVED, 17 RESERVED, 18 SDA / SPI CS_N, 19 SCL /SPI CLK, 20 TXD / SPI MISO, 21 RXD / SPI MOSI, 22 V_BCKP, 23 VCC, 24 GND

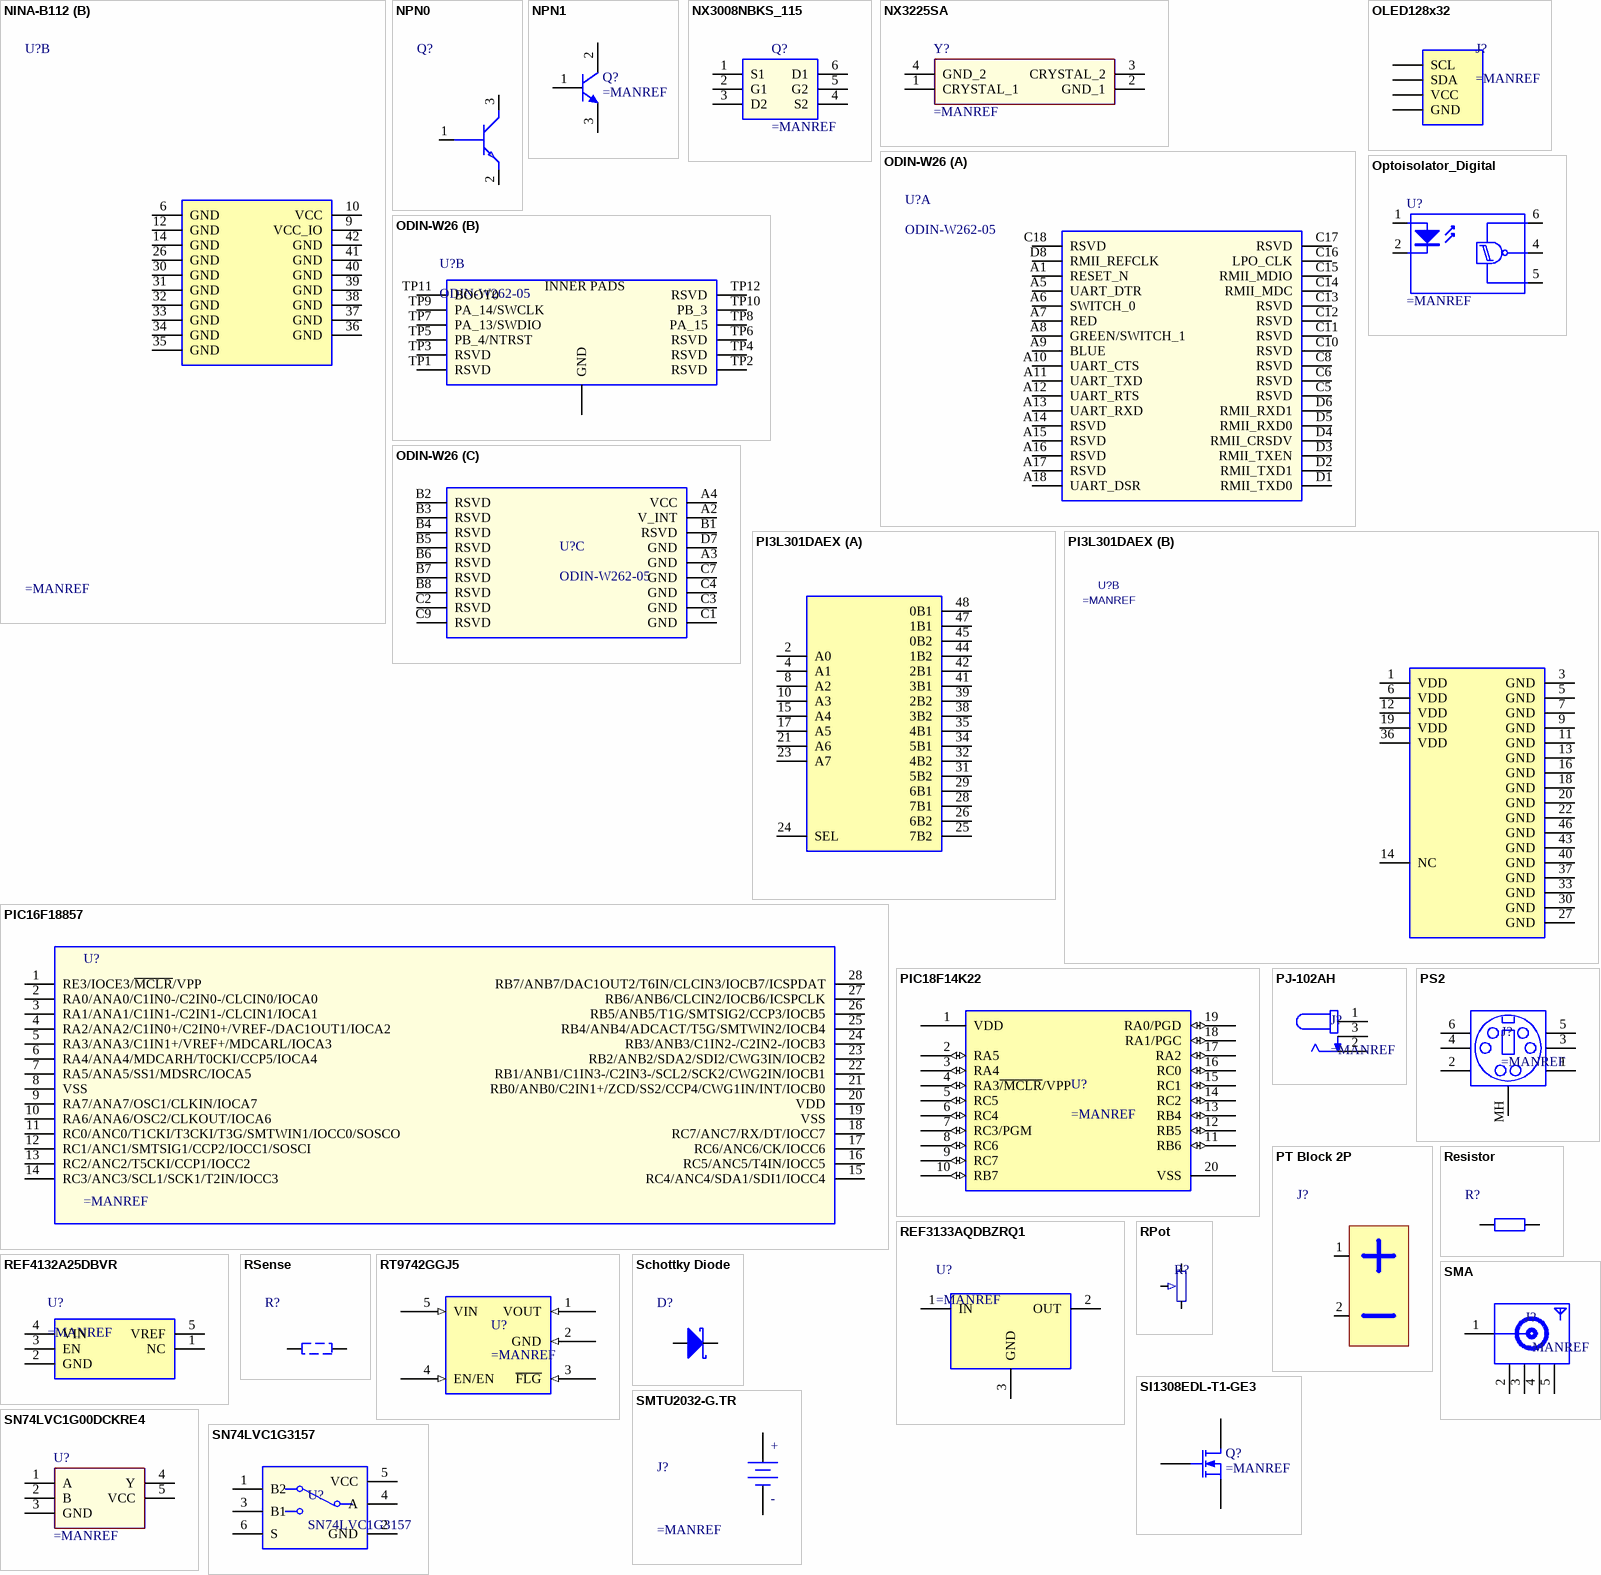
[diagram p4: symbols NINA-B112 to SN74LVC1G3157]

## NINA-B112
designator U?
part A pins: 1 GPIO_1 (io), 2 GPIO_2 (io), 3 GPIO_3 (io), 4 GPIO_4 (io), 5 GPIO_5 (io), 7 GPIO_7 (io), 8 SWO/GPIO_8 (io), 11 SWDCLK, 13 ANT (io), 15 SWDIO (io), 16 GPIO_16 (io), 17 GPIO_17 (io), 18 GPIO_18 (io), 19 RESET_N (io), 20 GPIO_20 (io), 21 GPIO_21 (io), 22 GPIO_22 (io), 23 GPIO_23 (io), 24 GPIO_24 (io), 25 GPIO_25 (io), 27 GPIO_27 (io), 28 NFC1/GPIO_28 (io), 29 NFC2/GPIO_29 (io)
part B pins: 6 GND (power), 9 VCC_IO (power), 10 VCC (power), 12 GND (power), 14 GND (power), 26 GND (power), 30 GND (power), 31 GND (power), 32 GND (power), 33 GND (power), 34 GND (power), 35 GND (power), 36 GND (power), 37 GND (power), 38 GND (power), 39 GND (power), 40 GND (power), 41 GND (power), 42 GND (power)

## NPN0
designator Q?
pins: 1 B, 2 E, 3 C

## NPN1
designator Q?
pins: 1 B, 2 C, 3 E

## NX3008NBKS_115
designator Q?
pins: 1 S1, 2 G1, 3 D2, 4 S2, 5 G2, 6 D1

## NX3225SA
designator Y?
pins: 1 CRYSTAL_1, 2 GND_1, 3 CRYSTAL_2, 4 GND_2

## ODIN-W26
designator U?, comment ODIN-W262-05
part A pins: A1 RESET_N, A5 UART_DTR, A6 SWITCH_0, A7 RED, A8 GREEN/SWITCH_1, A9 BLUE, A10 UART_CTS, A11 UART_TXD, A12 UART_RTS, A13 UART_RXD, A14 RSVD, A15 RSVD, A16 RSVD, A17 RSVD, A18 UART_DSR, C5 RSVD, C6 RSVD, C8 RSVD, C10 RSVD, C11 RSVD, C12 RSVD, C13 RSVD, C14 RMII_MDC, C15 RMII_MDIO, C16 LPO_CLK, C17 RSVD, C18 RSVD, D1 RMII_TXD0, D2 RMII_TXD1, D3 RMII_TXEN, D4 RMII_CRSDV, D5 RMII_RXD0, D6 RMII_RXD1, D8 RMII_REFCLK
part B pins: GND, TP1 RSVD, TP2 RSVD, TP3 RSVD, TP4 RSVD, TP5 PB_4/NTRST, TP6 RSVD, TP7 PA_13/SWDIO, TP8 PA_15, TP9 PA_14/SWCLK, TP10 PB_3, TP11 BOOT0, TP12 RSVD
part C pins: A2 V_INT, A3 GND, A4 VCC, B1 RSVD, B2 RSVD, B3 RSVD, B4 RSVD, B5 RSVD, B6 RSVD, B7 RSVD, B8 RSVD, C1 GND, C2 RSVD, C3 GND, C4 GND, C7 GND, C9 RSVD, D7 GND
part B text: INNER PADS

## OLED128x32
designator J?
pins: 1 GND, 2 VCC, 3 SDA, 4 SCL

## Optoisolator_Digital
designator U?
Schmitt Trigger Output Optocoupler
pins: 1 A "Anode", 2 K "Cathode", 4 VO "Emitter", 5 GND "Emitter", 6 VCC "Collector"

## PI3L301DAEX
designator U?
part A pins: 2 A0, 4 A1, 8 A2, 10 A3, 15 A4, 17 A5, 21 A6, 23 A7, 24 SEL, 25 7B2, 26 6B2, 28 7B1, 29 6B1, 31 5B2, 32 4B2, 34 5B1, 35 4B1, 38 3B2, 39 2B2, 41 3B1, 42 2B1, 44 1B2, 45 0B2, 47 1B1, 48 0B1
part B pins: 1 VDD, 3 GND, 5 GND, 6 VDD, 7 GND, 9 GND, 11 GND, 12 VDD, 13 GND, 14 NC, 16 GND, 18 GND, 19 VDD, 20 GND, 22 GND, 27 GND, 30 GND, 33 GND, 36 VDD, 37 GND, 40 GND, 43 GND, 46 GND

## PIC16F18857
designator U?
pins: 1 RE3/IOCE3/~{MCLR}/VPP, 2 RA0/ANA0/C1IN0-/C2IN0-/CLCIN0/IOCA0, 3 RA1/ANA1/C1IN1-/C2IN1-/CLCIN1/IOCA1, 4 RA2/ANA2/C1IN0+/C2IN0+/VREF-/DAC1OUT1/IOCA2, 5 RA3/ANA3/C1IN1+/VREF+/MDCARL/IOCA3, 6 RA4/ANA4/MDCARH/T0CKI/CCP5/IOCA4, 7 RA5/ANA5/SS1/MDSRC/IOCA5, 8 VSS, 9 RA7/ANA7/OSC1/CLKIN/IOCA7, 10 RA6/ANA6/OSC2/CLKOUT/IOCA6, 11 RC0/ANC0/T1CKI/T3CKI/T3G/SMTWIN1/IOCC0/SOSCO, 12 RC1/ANC1/SMTSIG1/CCP2/IOCC1/SOSCI, 13 RC2/ANC2/T5CKI/CCP1/IOCC2, 14 RC3/ANC3/SCL1/SCK1/T2IN/IOCC3, 15 RC4/ANC4/SDA1/SDI1/IOCC4, 16 RC5/ANC5/T4IN/IOCC5, 17 RC6/ANC6/CK/IOCC6, 18 RC7/ANC7/RX/DT/IOCC7, 19 VSS, 20 VDD, 21 RB0/ANB0/C2IN1+/ZCD/SS2/CCP4/CWG1IN/INT/IOCB0, 22 RB1/ANB1/C1IN3-/C2IN3-/SCL2/SCK2/CWG2IN/IOCB1, 23 RB2/ANB2/SDA2/SDI2/CWG3IN/IOCB2, 24 RB3/ANB3/C1IN2-/C2IN2-/IOCB3, 25 RB4/ANB4/ADCACT/T5G/SMTWIN2/IOCB4, 26 RB5/ANB5/T1G/SMTSIG2/CCP3/IOCB5, 27 RB6/ANB6/CLCIN2/IOCB6/ICSPCLK, 28 RB7/ANB7/DAC1OUT2/T6IN/CLCIN3/IOCB7/ICSPDAT

## PIC18F14K22
designator U?
pins: 1 VDD (power), 2 RA5 (io), 3 RA4 (io), 4 RA3~{/MCLR}/VPP (io), 5 RC5 (io), 6 RC4 (io), 7 RC3/PGM (io), 8 RC6 (io), 9 RC7 (io), 10 RB7 (io), 11 RB6 (io), 12 RB5 (io), 13 RB4 (io), 14 RC2 (io), 15 RC1 (io), 16 RC0 (io), 17 RA2 (io), 18 RA1/PGC (io), 19 RA0/PGD (io), 20 VSS (power)

## PJ-102AH
designator J?
pins: 1, 2, 3

## PS2
designator J?
pins: 1, 2, 3, 4, 5, 6, MH

## PT Block 2P
designator J?
pins: 1 V+ (power), 2 V- (power)

## REF3133AQDBZRQ1
designator U?
pins: 1 IN, 2 OUT, 3 GND

## REF4132A25DBVR
designator U?
pins: 1 NC, 2 GND, 3 EN, 4 VIN, 5 VREF

## Resistor
designator R?
Resistor
pins: 1, 2

## RPot
designator R?
pins: 1, 2, 3

## RSense
designator R?
pins: 1, 2

## RT9742GGJ5
designator U?
pins: 1 VOUT (in), 2 GND (in), 3 ~{FLG} (in), 4 EN/EN (in), 5 VIN (in)

## Schottky Diode
designator D?
pins: 1 A, 2 K

## SI1308EDL-T1-GE3
designator Q?
pins: 1 G, 2 S, 3 D

## SMA
designator J?
pins: 1, 2, 3, 4, 5

## SMTU2032-G.TR
designator J?
pins: 1 +, 2 -

## SN74LVC1G00DCKRE4
designator U?
pins: 1 A, 2 B, 3 GND, 4 Y, 5 VCC

## SN74LVC1G3157
designator U?
pins: 1 B2, 2 GND, 3 B1, 4 A, 5 VCC, 6 S

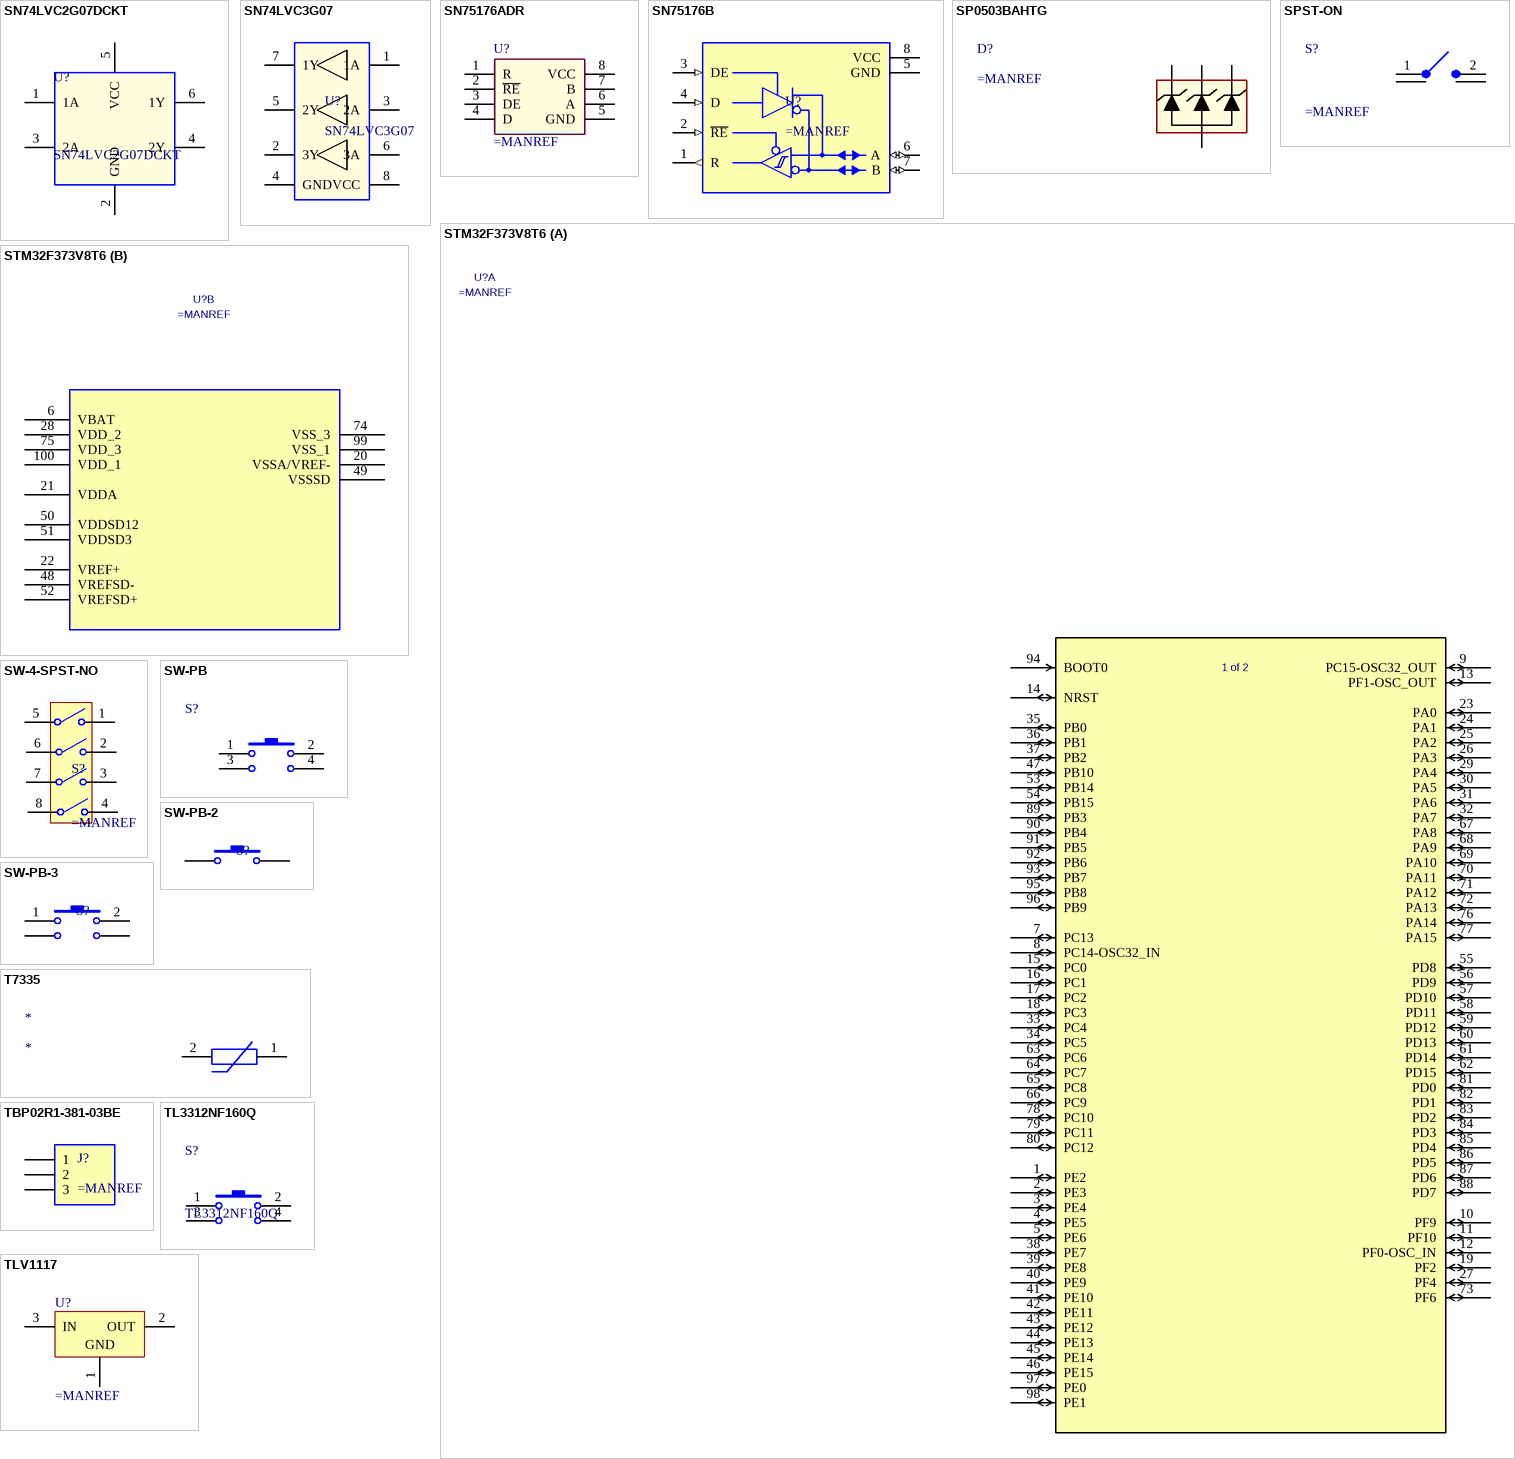
[diagram p5: symbols SN74LVC2G07DCKT to TLV1117]

## SN74LVC2G07DCKT
designator U?
Dual Buffer/Driver with Open-Drain Output; Manufacturer_Name: Texas Instruments; Geometry.Height: 1.1mm; Mouser Part Number: 595-SN74LVC2G07DCKT; Mouser Price/Stock: https://www.mouser.co.uk/ProductDetail/Texas-Instruments/SN74LVC2G07DCKT?qs=pajgIaoyDUh%252B8BjKWdvxSw%3D%3D; Manufacturer_Part_Number: SN74LVC2G07DCKT; Datasheet Link: http://www.ti.com/lit/gpn/SN74LVC2G07
pins: 1 1A, 2 GND, 3 2A, 4 2Y, 5 VCC, 6 1Y

## SN74LVC3G07
designator U?
pins: 1 1A, 2 3Y, 3 2A, 4 GND, 5 2Y, 6 3A, 7 1Y, 8 VCC

## SN75176ADR
designator U?
pins: 1 R, 2 ~{RE}, 3 DE, 4 D, 5 GND, 6 A, 7 B, 8 VCC

## SN75176B
designator U?
pins: 1 R (out), 2 ~{RE} (in), 3 DE (in), 4 D (in), 5 GND (power), 6 A (io), 7 B (io), 8 VCC (power)

## SP0503BAHTG
designator D?
pins: 1, 2, 3, 4

## SPST-ON
designator S?
pins: 1 COM, 2 NO, MH1, MH2

## STM32F373V8T6
designator U?
part A pins: 1 PE2, 2 PE3, 3 PE4, 4 PE5, 5 PE6, 7 PC13, 8 PC14-OSC32_IN, 9 PC15-OSC32_OUT, 10 PF9, 11 PF10, 12 PF0-OSC_IN, 13 PF1-OSC_OUT, 14 NRST, 15 PC0, 16 PC1, 17 PC2, 18 PC3, 19 PF2, 23 PA0, 24 PA1, 25 PA2, 26 PA3, 27 PF4, 29 PA4, 30 PA5, 31 PA6, 32 PA7, 33 PC4, 34 PC5, 35 PB0, 36 PB1, 37 PB2, 38 PE7, 39 PE8, 40 PE9, 41 PE10, 42 PE11, 43 PE12, 44 PE13, 45 PE14, 46 PE15, 47 PB10, 53 PB14, 54 PB15, 55 PD8, 56 PD9, 57 PD10, 58 PD11, 59 PD12, 60 PD13, 61 PD14, 62 PD15, 63 PC6, 64 PC7, 65 PC8, 66 PC9, 67 PA8, 68 PA9, 69 PA10, 70 PA11, 71 PA12, 72 PA13, 73 PF6, 76 PA14, 77 PA15, 78 PC10, 79 PC11, 80 PC12, 81 PD0, 82 PD1, 83 PD2, 84 PD3, 85 PD4, 86 PD5, 87 PD6, 88 PD7, 89 PB3, 90 PB4, 91 PB5, 92 PB6, 93 PB7, 94 BOOT0, 95 PB8, 96 PB9, 97 PE0, 98 PE1
part B pins: 6 VBAT (power), 20 VSSA/VREF- (power), 21 VDDA (power), 22 VREF+ (power), 28 VDD_2 (power), 48 VREFSD- (power), 49 VSSSD (power), 50 VDDSD12 (power), 51 VDDSD3 (power), 52 VREFSD+ (power), 74 VSS_3 (power), 75 VDD_3 (power), 99 VSS_1 (power), 100 VDD_1 (power)
part A text: 1 of 2
part B text: 2 of 2

## SW-4-SPST-NO
designator S?
pins: 1, 2, 3, 4, 5, 6, 7, 8

## SW-PB
designator S?
pins: 1, 2, 3, 4

## SW-PB-2
designator S?
pins: 1, 2

## SW-PB-3
designator S?
pins: 1, 2, MH, MH

## T7335
designator *
pins: 1, 2

## TBP02R1-381-03BE
designator J?
pins: 1, 2, 3

## TL3312NF160Q
designator S?
pins: 1, 2, 3, 4

## TLV1117
designator U?
pins: 1 GND (power), 2 OUT (power), 3 IN (power)

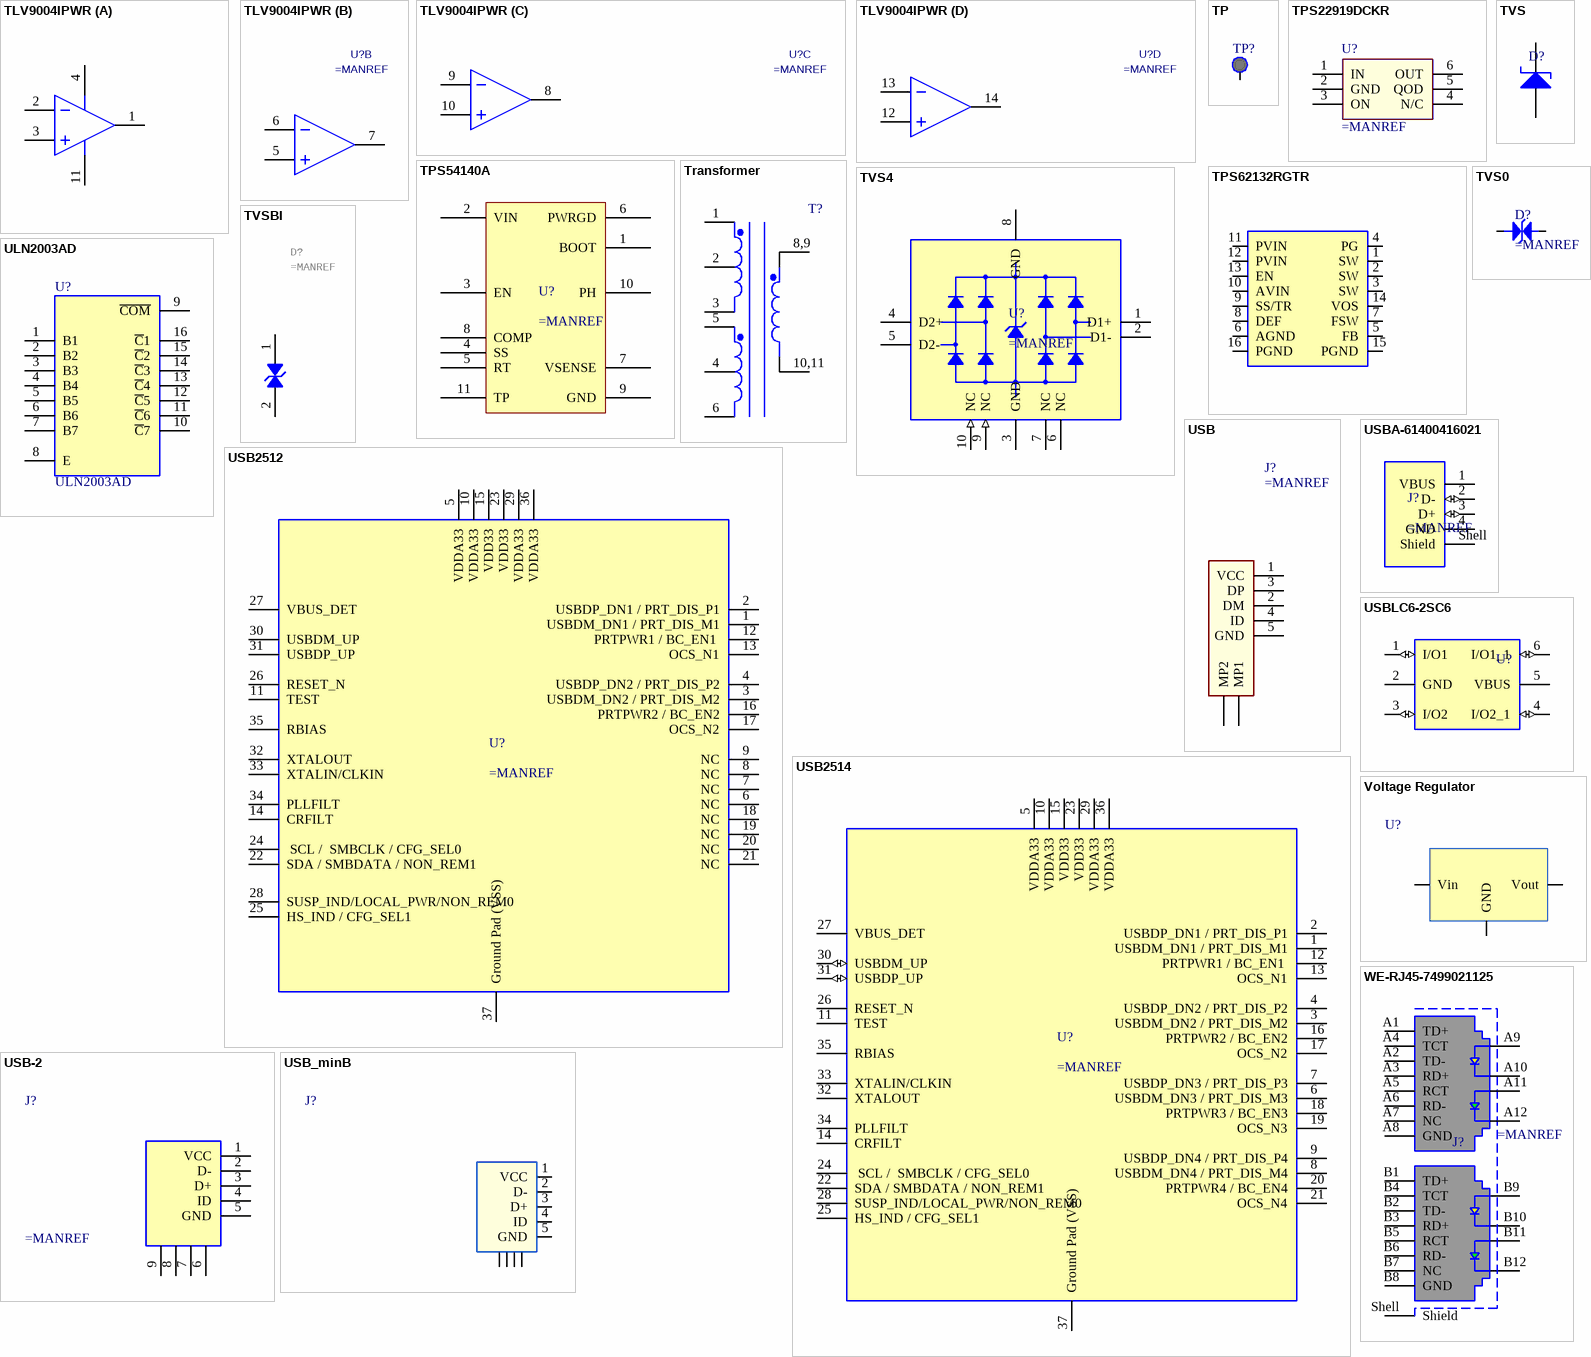
[diagram p6: symbols TLV9004IPWR to WE-RJ45-7499021125]

## TLV9004IPWR
designator U?
part A pins: 1 OUT A, 2 -IN A, 3 +IN A, 4 +V, 11 -V
part B pins: 5 +IN B, 6 –IN B, 7 OUT B
part C pins: 8 OUT C, 9 –IN C, 10 +IN C
part D pins: 12 +IN D, 13 –IN D, 14 OUT D
2 alternate drawings of the same symbol

## TP
designator TP?  (no BOM)
pins: 1

## TPS22919DCKR
designator U?
pins: 1 IN, 2 GND, 3 ON, 4 N/C, 5 QOD, 6 OUT

## TPS54140A
designator U?
pins: 1 BOOT, 2 VIN, 3 EN, 4 SS, 5 RT, 6 PWRGD, 7 VSENSE, 8 COMP, 9 GND, 10 PH, 11 TP

## TPS62132RGTR
designator U?
pins: 1 SW, 2 SW, 3 SW, 4 PG, 5 FB, 6 AGND, 7 FSW, 8 DEF, 9 SS/TR, 10 AVIN, 11 PVIN, 12 PVIN, 13 EN, 14 VOS, 15 PGND, 16 PGND

## Transformer
designator T?
pins: 1, 2, 3, 4, 5, 6, 8,9, 10,11

## TVS
designator D?
pins: 1, 2 K1A2

## TVS0
designator D?
pins: 1, 2 K1A2

## TVS4
designator U?
pins: 1 D1+, 2 D1-, 3 GND, 4 D2+, 5 D2-, 6 NC, 7 NC, 8 GND, 9 NC (in), 10 NC (in)

## TVSBI
designator D?
pins: 1, 2

## ULN2003AD
designator U?
pins: 1 B1, 2 B2, 3 B3, 4 B4, 5 B5, 6 B6, 7 B7, 8 E (power), 9 ~{COM}, 10 ~{C}7 (oc), 11 ~{C}6 (oc), 12 ~{C}5 (oc), 13 ~{C}4 (oc), 14 ~{C}3 (oc), 15 ~{C}2 (oc), 16 ~{C}1 (oc)

## USB
designator J?
pins: 1 VCC, 2 DM, 3 DP, 4 ID, 5 GND, MP1, MP2

## USB2512
designator U?
pins: 1 USBDM_DN1 / PRT_DIS_M1, 2 USBDP_DN1 / PRT_DIS_P1, 3 USBDM_DN2 / PRT_DIS_M2, 4 USBDP_DN2 / PRT_DIS_P2, 5 VDDA33, 6 NC, 7 NC, 8 NC, 9 NC, 10 VDDA33, 11 TEST, 12 PRTPWR1 / BC_EN1 , 13 OCS_N1, 14 CRFILT, 15 VDD33, 16 PRTPWR2 / BC_EN2, 17 OCS_N2, 18 NC, 19 NC, 20 NC, 21 NC, 22 SDA / SMBDATA / NON_REM1, 23 VDD33, 24  SCL /  SMBCLK / CFG_SEL0, 25 HS_IND / CFG_SEL1, 26 RESET_N, 27 VBUS_DET, 28 SUSP_IND/LOCAL_PWR/NON_REM0, 29 VDDA33, 30 USBDM_UP, 31 USBDP_UP, 32 XTALOUT, 33 XTALIN/CLKIN, 34 PLLFILT, 35 RBIAS, 36 VDDA33, 37 Ground Pad (VSS)

## USB2514
designator U?
pins: 1 USBDM_DN1 / PRT_DIS_M1, 2 USBDP_DN1 / PRT_DIS_P1, 3 USBDM_DN2 / PRT_DIS_M2, 4 USBDP_DN2 / PRT_DIS_P2, 5 VDDA33, 6 USBDM_DN3 / PRT_DIS_M3, 7 USBDP_DN3 / PRT_DIS_P3, 8 USBDM_DN4 / PRT_DIS_M4, 9 USBDP_DN4 / PRT_DIS_P4, 10 VDDA33, 11 TEST, 12 PRTPWR1 / BC_EN1 , 13 OCS_N1, 14 CRFILT, 15 VDD33, 16 PRTPWR2 / BC_EN2, 17 OCS_N2, 18 PRTPWR3 / BC_EN3, 19 OCS_N3, 20 PRTPWR4 / BC_EN4, 21 OCS_N4, 22 SDA / SMBDATA / NON_REM1, 23 VDD33, 24  SCL /  SMBCLK / CFG_SEL0, 25 HS_IND / CFG_SEL1, 26 RESET_N, 27 VBUS_DET, 28 SUSP_IND/LOCAL_PWR/NON_REM0, 29 VDDA33, 30 USBDM_UP (io), 31 USBDP_UP (io), 32 XTALOUT, 33 XTALIN/CLKIN, 34 PLLFILT, 35 RBIAS, 36 VDDA33, 37 Ground Pad (VSS)

## USB-2
designator J?
pins: 1 VCC, 2 D-, 3 D+, 4 ID, 5 GND, 6, 7, 8   Shield, 9

## USB_minB
designator J?
pins: 1 VCC (power), 2 D- (io), 3 D+ (io), 4 ID (power), 5 GND (power), SH1 SHIELD (power), SH1 SHIELD (power), SH1 SHIELD (power), SH1 SHIELD (power)

## USBA-61400416021
designator J?
pins: 1 VBUS, 2 D- (io), 3 D+ (io), 4 GND, Shell Shield

## USBLC6-2SC6
designator U?
pins: 1 I/O1 (io), 2 GND, 3 I/O2 (io), 4 I/O2_1 (io), 5 VBUS, 6 I/O1_1 (io)

## Voltage Regulator
designator U?
pins: 1 GND, 2 Vin, 3 Vout

## WE-RJ45-7499021125
designator J?
pins: A1 TD+, A2 TD-, A3 RD+, A4 TCT, A5 RCT, A6 RD-, A7 NC, A8 GND, A9, A10, A11, A12, B1 TD+, B2 TD-, B3 RD+, B4 TCT, B5 RCT, B6 RD-, B7 NC, B8 GND, B9, B10, B11, B12, Shell Shield

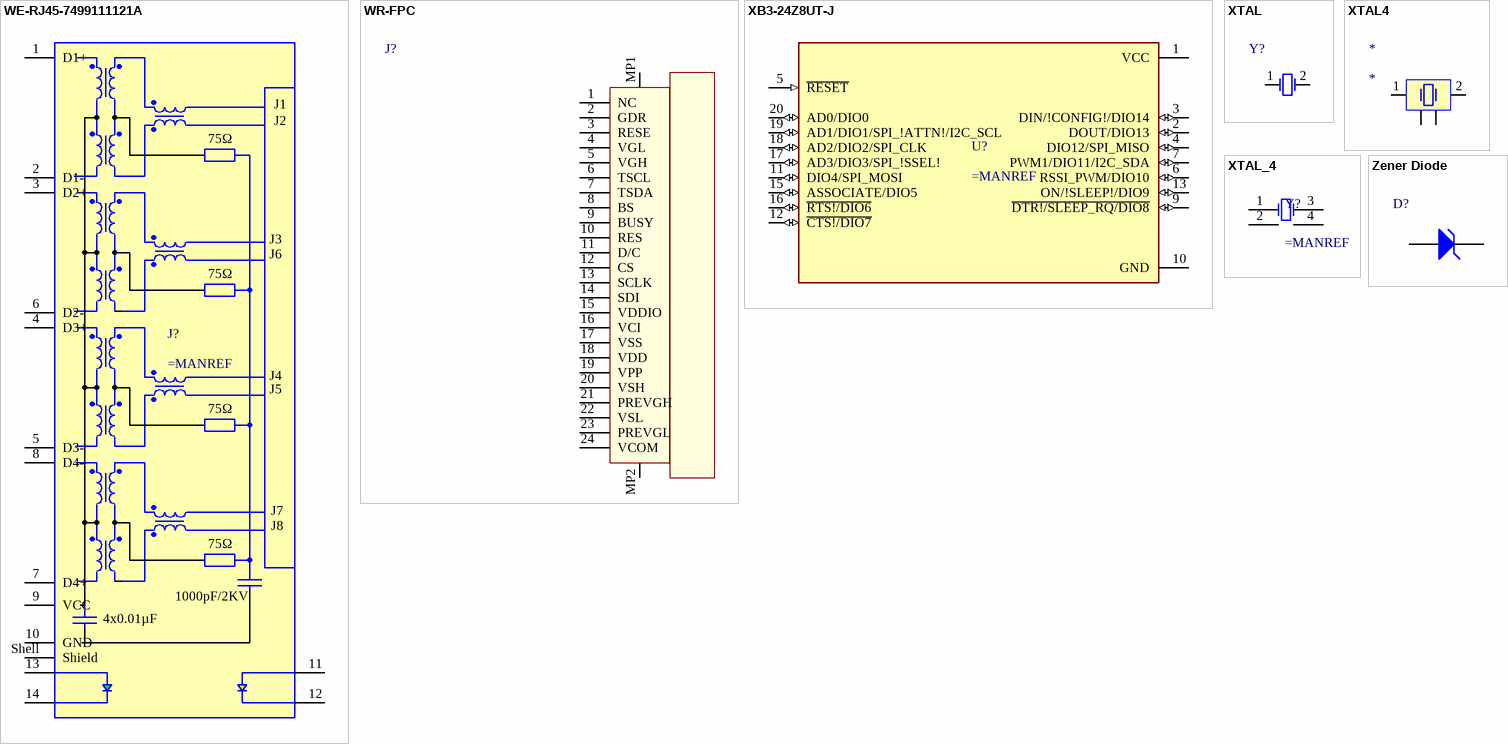
[diagram p7: symbols WE-RJ45-7499111121A to Zener Diode]

## WE-RJ45-7499111121A
designator J?
pins: 1 D1+, 2 D1-, 3 D2+, 4 D3+, 5 D3-, 6 D2-, 7 D4+, 8 D4-, 9 VCC, 10 GND, 11, 12, 13, 14, Shell Shield
text: J1; J2; 75Ω; J3; J6; J4; J5; J7; J8; 1000pF/2KV; 4x0.01µF

## WR-FPC
designator J?
ComponentLink1Description: Manufacturer; ComponentLink1URL: http://www.we-online.de; ComponentLink2Description: Datasheet; ComponentLink2URL: https://katalog.we-online.com/em/datasheet/68712414022.pdf
pins: 1 NC, 2 GDR, 3 RESE, 4 VGL, 5 VGH, 6 TSCL, 7 TSDA, 8 BS, 9 BUSY, 10 RES, 11 D/C, 12 CS, 13 SCLK, 14 SDI, 15 VDDIO, 16 VCI, 17 VSS, 18 VDD, 19 VPP, 20 VSH, 21 PREVGH, 22 VSL, 23 PREVGL, 24 VCOM, MP1, MP2

## XB3-24Z8UT-J
designator U?
pins: 1 VCC (power), 2 DOUT/DIO13 (io), 3 DIN/!CONFIG!/DIO14 (io), 4 DIO12/SPI_MISO (io), 5 ~{RESET} (in), 6 RSSI_PWM/DIO10 (io), 7 PWM1/DIO11/I2C_SDA (io), 9 ~{DTR!/SLEEP_RQ/DIO8} (io), 10 GND (power), 11 DIO4/SPI_MOSI (io), 12 ~{CTS!/DIO7} (io), 13 ON/!SLEEP!/DIO9 (io), 15 ASSOCIATE/DIO5 (io), 16 ~{RTS!/DIO6} (io), 17 AD3/DIO3/SPI_!SSEL! (io), 18 AD2/DIO2/SPI_CLK (io), 19 AD1/DIO1/SPI_!ATTN!/I2C_SCL (io), 20 AD0/DIO0 (io)

## XTAL
designator Y?
Crystal Oscillator
pins: 1 OSC1, 2 OSC2

## XTAL4
designator *
pins: 1 OSC1, 2 OSC2, GND1, GND2

## XTAL_4
designator Y?
pins: 1 OSC1, 2 Case1, 3, 4 Case2

## Zener Diode
designator D?
pins: 1 A, 2 K